# Altium integrated library ALL_COMP (5).IntLib: 200 symbols (part 2 of 2)
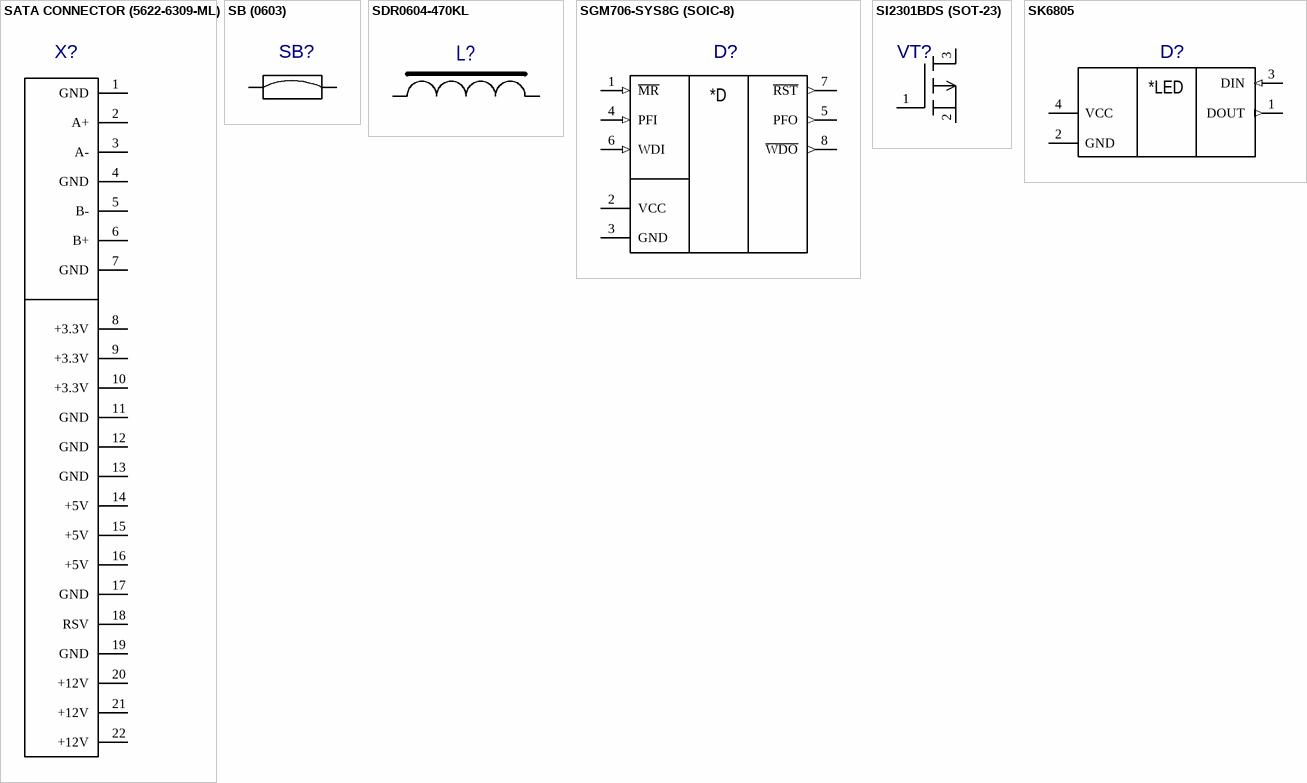
[diagram p19: symbols SATA CONNECTOR (5622-6309-ML) to SK6805]

## SDR0604-470KL
designator L?, comment 0.37 Ohm  (value not drawn)
Value: {Value}; ComponentHeigt: 3.2; Firm: TDK; Name: Катушка индуктивности; Kind: Катушка индуктивности B82432T TDK; Typ: B82432T; NN: *; Packaging: SIMIT 1812-T
footprint SDR0604-470KL
pins: 1, 2

## SGM706-SYS8G (SOIC-8)
designator D?  (value not drawn)
ComponentHeigt: 1.8; Firme: Linear; Leadform: формована; Kind: Микросхема; ClassName: *; Component Link: *; Packaging: SOT-223; NN: *
footprint SOIC-8(R-8)
pins: 1 ~{MR} (in), 2 VCC (power), 3 GND, 4 PFI (in), 5 PFO (out), 6 WDI (in), 7 ~{RST} (out), 8 ~{WDO} (out)
text: *D

## SI2301BDS (SOT-23)
designator VT?
ComponentHeigt: 0.9; Firme: Infineon; Leadform: SMD; NN: 24003422; KIND: Транзистор BSS209PW Infineon; ClassName: *; ComponentWeigt: *; Packaging: PG-SOT-323
footprint SOT-23
pins: 1 G, 2 S, 3 D

## SK6805
designator D?  (value not drawn)
ComponentHeigt: 1.8; Firme: Linear; Leadform: формована; Kind: Микросхема; ClassName: *; Component Link: *; Packaging: SOT-223; NN: *
footprint SK6805
pins: 1 DOUT (out), 2 GND, 3 DIN (in), 4 VCC
text: *LED

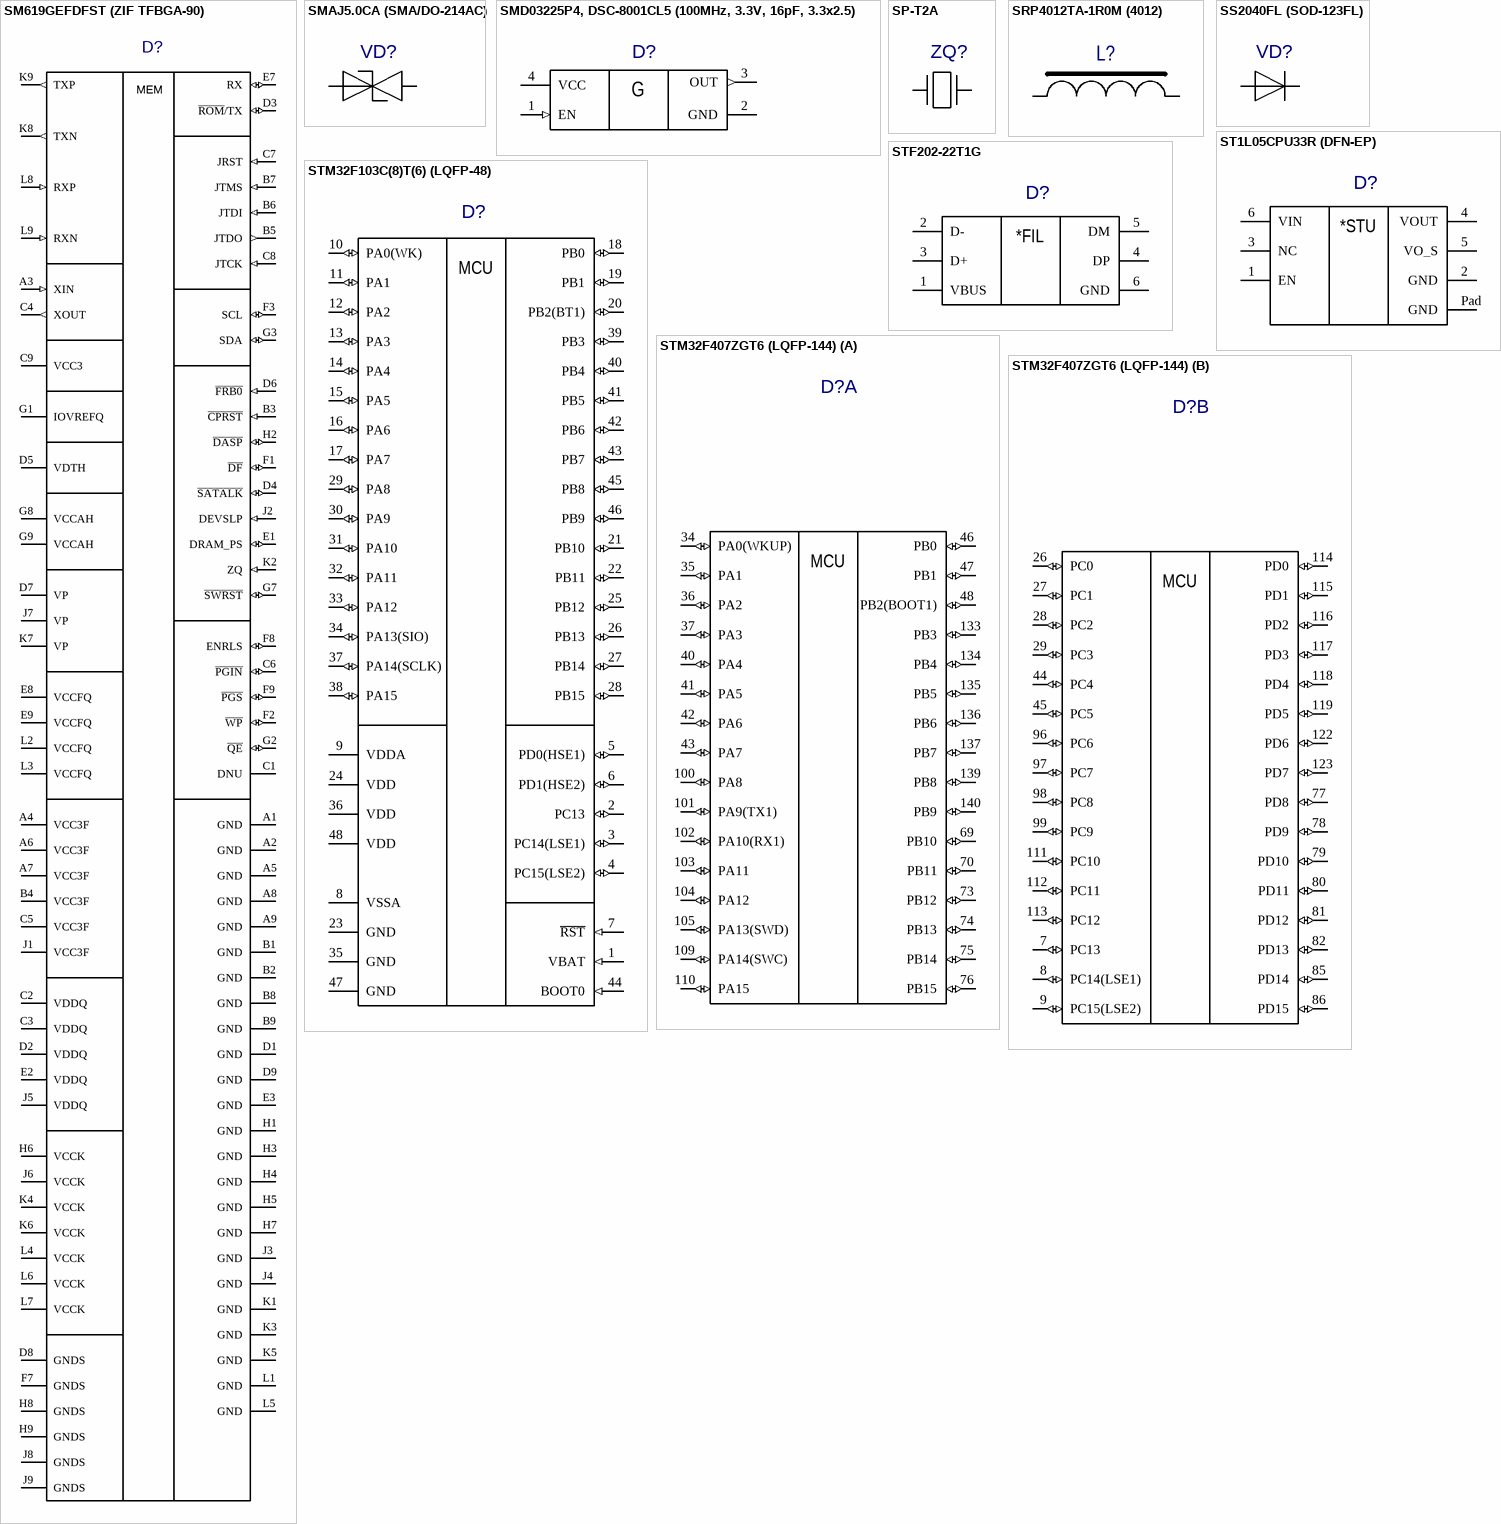
[diagram p9: symbols SM619GEFDFST (ZIF TFBGA-90) to STM32F407ZGT6 (LQFP-144)]

## SM619GEFDFST (ZIF TFBGA-90)
designator D?, comment MT41K256M16TW-107  (value not drawn)
ComponentHeigt: 1.8; Firme: Linear; Leadform: формована; Kind: Микросхема; ClassName: *; Component Link: *; Packaging: SOT-223; NN: *
footprint ASS3145-BGA90-16X20-1-1.67-ZS
pins: A1 GND, A2 GND, A3 XIN (in), A4 VCC3F (power), A5 GND, A6 VCC3F (power), A7 VCC3F (power), A8 GND, A9 GND, B1 GND, B2 GND, B3 ~{CPRST} (in), B4 VCC3F (power), B5 JTDO (out), B6 JTDI (in), B7 JTMS (in), B8 GND, B9 GND, C1 DNU, C2 VDDQ (power), C3 VDDQ (power), C4 XOUT (out), C5 VCC3F (power), C6 ~{PGIN} (io), C7 JRST (in), C8 JTCK (in), C9 VCC3 (power), D1 GND, D2 VDDQ (power), D3 ~{ROM}/TX (io), D4 ~{SATALK} (io), D5 VDTH (power), D6 ~{FRB0} (in), D7 VP (power), D8 GNDS, D9 GND, E1 DRAM_PS (io), E2 VDDQ (power), E3 GND, E7 RX (io), E8 VCCFQ (power), E9 VCCFQ (power), F1 ~{DF} (io), F2 ~{WP} (io), F3 SCL (io), F7 GNDS, F8 ENRLS (io), F9 ~{PGS} (io), G1 IOVREFQ (power), G2 ~{QE} (io), G3 SDA (io), G7 ~{SWRST} (io), G8 VCCAH (power), G9 VCCAH (power), H1 GND, H2 ~{DASP} (io), H3 GND, H4 GND, H5 GND, H6 VCCK (power), H7 GND, H8 GNDS, H9 GNDS, J1 VCC3F (power), J2 DEVSLP (in), J3 GND, J4 GND, J5 VDDQ (power), J6 VCCK (power), J7 VP (power), J8 GNDS, J9 GNDS, K1 GND, K2 ZQ (in), K3 GND, K4 VCCK (power), K5 GND, K6 VCCK (power), K7 VP (power), K8 TXN (out), K9 TXP (out), L1 GND, L2 VCCFQ (power), L3 VCCFQ (power), L4 VCCK (power), L5 GND, L6 VCCK (power), L7 VCCK (power), L8 RXP (in), L9 RXN (in)
text: MEM

## SMAJ5.0CA (SMA/DO-214AC)
designator VD?  (value not drawn)
ComponentHeigt: 0.75; Leadform: в отверстия; Firme: Kingbright; NN: 24003000; KIND: Светодиод L-1154GD Kingbright; Component Link: *; ClassName: *
footprint SMA(DO-214AC)
pins: 1 A, 2 K
1 alternate drawing of the same symbol

## SMD03225P4, DSC-8001CL5 (100MHz, 3.3V, 16pF, 3.3x2.5)
designator D?  (value not drawn)
KIND: Генератор кварцевый 1116R66M00000BF Vectron; NN: 24502141
footprint SMD03225
pins: 1 EN (in), 2 GND, 3 OUT (out), 4 VCC (power)
text: G

## SP-T2A
designator ZQ?  (value not drawn)
footprint SP-T2A (HC-49SM)
pins: 1 (power), 4 (power)

## SRP4012TA-1R0M (4012)
designator L?, comment 0.37 Ohm  (value not drawn)
Value: {Value}; ComponentHeigt: 3.2; Firm: TDK; Name: Катушка индуктивности; Kind: Катушка индуктивности B82432T TDK; Typ: B82432T; NN: *; Packaging: SIMIT 1812-T
footprint SRP4012TA-1R0M (4012)
pins: 1, 2

## SS2040FL (SOD-123FL)
designator VD?  (value not drawn)
ComponentHeigt: 0.75; Leadform: в отверстия; Firme: Kingbright; NN: 24003000; KIND: Светодиод L-1154GD Kingbright; Component Link: *; ClassName: *
footprint SOD-123
pins: 1 A, 2 K
1 alternate drawing of the same symbol

## ST1L05CPU33R (DFN-EP)
designator D?  (value not drawn)
ComponentHeigt: 1.8; Firme: Linear; Leadform: формована; Kind: Микросхема; ClassName: *; Component Link: *; Packaging: SOT-223; NN: *
footprint DFN-6
pins: 1 EN, 2 GND, 3 NC, 4 VOUT, 5 VO_S, 6 VIN, Pad GND
text: *STU

## STF202-22T1G
designator D?  (value not drawn)
ComponentHeigt: 1.8; Firme: Linear; Leadform: формована; Kind: Микросхема; ClassName: *; Component Link: *; Packaging: SOT-223; NN: *
footprint TSOP-6
pins: 1 VBUS, 2 D-, 3 D+, 4 DP, 5 DM, 6 GND
text: *FIL

## STM32F103C(8)T(6) (LQFP-48)
designator D?
Leadform: по чертежу; Note: Установка по чертежу; Kind: Микросхема; Component Link: www.honeywell.com/radhard; ClassName: *; NN: *
footprint 48-LQFP
pins: 1 VBAT (in), 2 PC13 (io), 3 PC14(LSE1) (io), 4 PC15(LSE2) (io), 5 PD0(HSE1) (io), 6 PD1(HSE2) (io), 7 ~{RST} (in), 8 VSSA, 9 VDDA (power), 10 PA0(WK) (io), 11 PA1 (io), 12 PA2 (io), 13 PA3 (io), 14 PA4 (io), 15 PA5 (io), 16 PA6 (io), 17 PA7 (io), 18 PB0 (io), 19 PB1 (io), 20 PB2(BT1) (io), 21 PB10 (io), 22 PB11 (io), 23 GND, 24 VDD (power), 25 PB12 (io), 26 PB13 (io), 27 PB14 (io), 28 PB15 (io), 29 PA8 (io), 30 PA9 (io), 31 PA10 (io), 32 PA11 (io), 33 PA12 (io), 34 PA13(SIO) (io), 35 GND, 36 VDD (power), 37 PA14(SCLK) (io), 38 PA15 (io), 39 PB3 (io), 40 PB4 (io), 41 PB5 (io), 42 PB6 (io), 43 PB7 (io), 44 BOOT0 (in), 45 PB8 (io), 46 PB9 (io), 47 GND, 48 VDD (power)
text: MCU

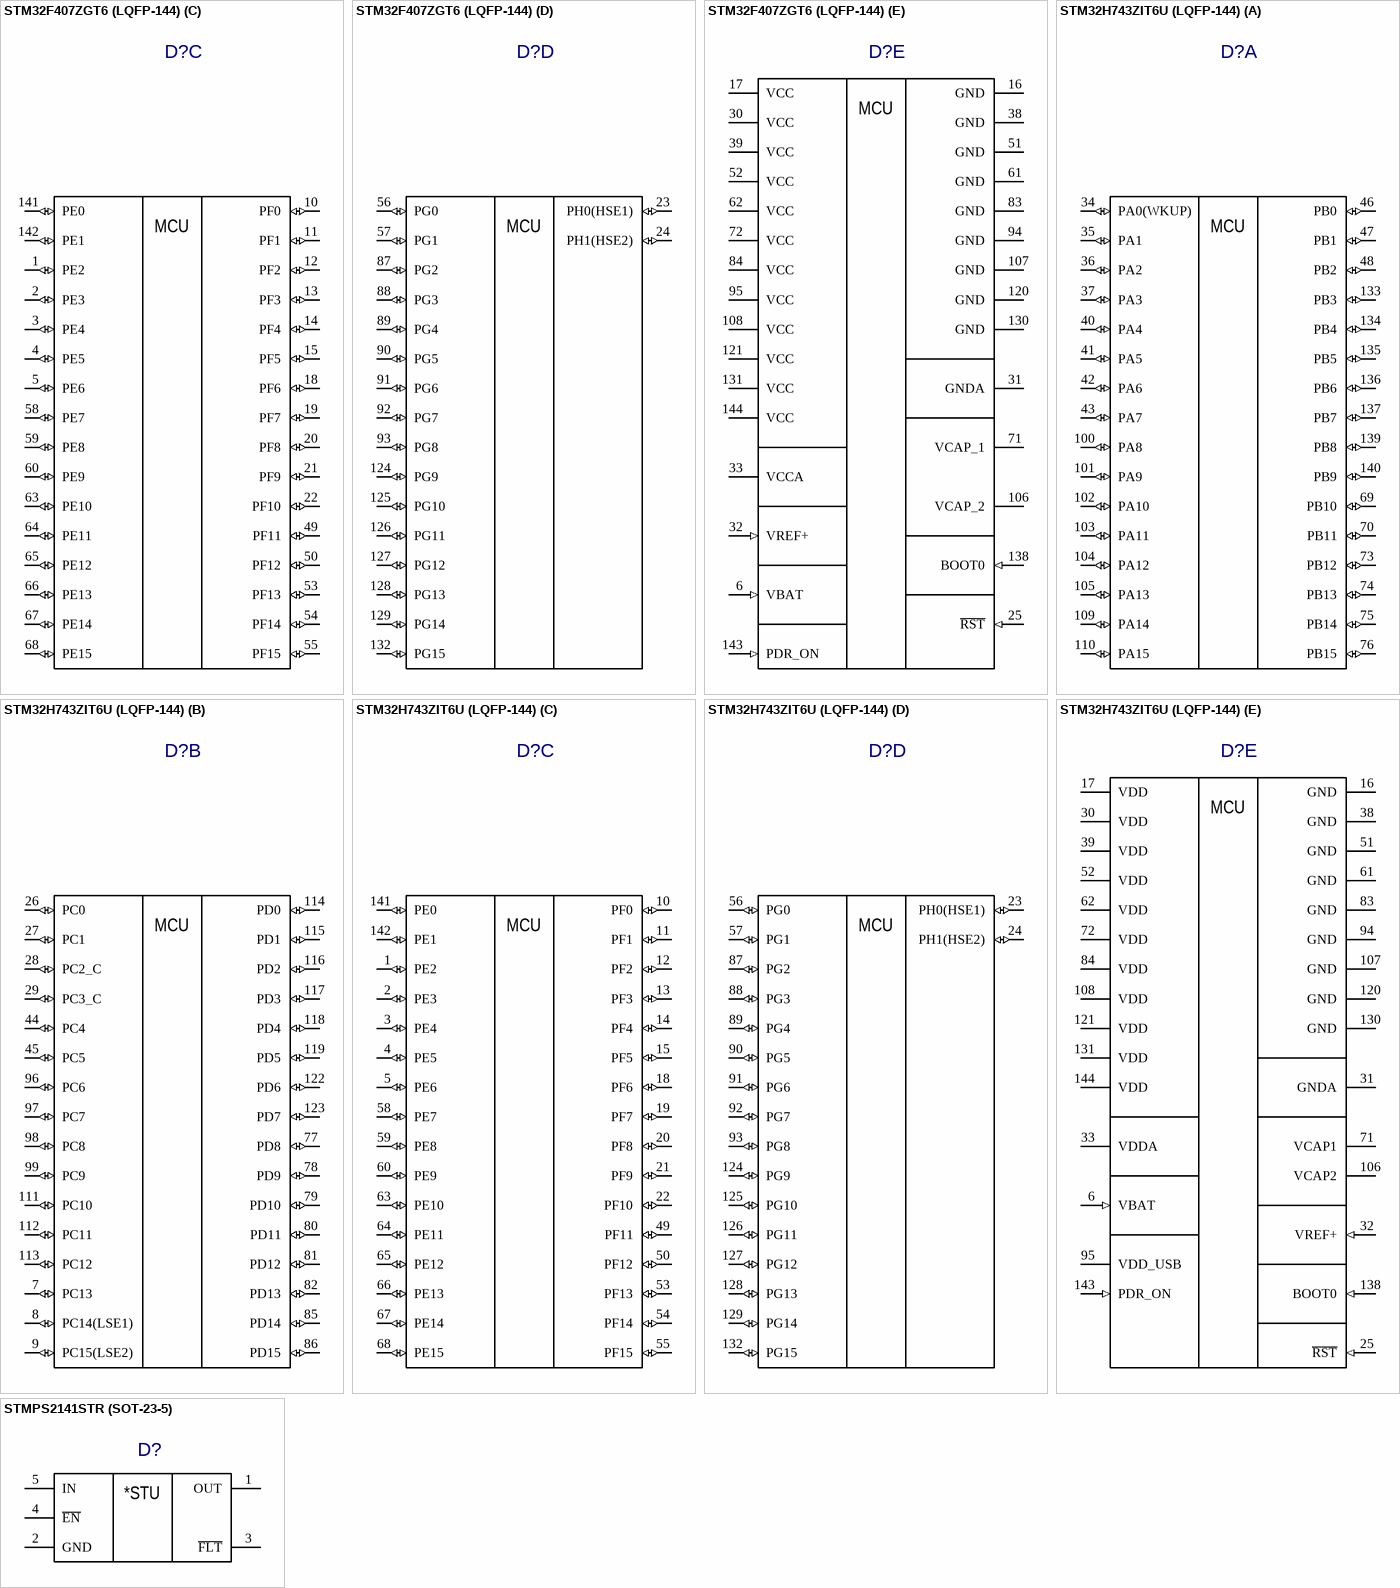
[diagram p10: symbols STM32F407ZGT6 (LQFP-144) to STMPS2141STR (SOT-23-5)]

## STM32F407ZGT6 (LQFP-144)
designator D?
Leadform: по чертежу; Note: Установка по чертежу; Kind: Микросхема; Component Link: www.honeywell.com/radhard; ClassName: *; NN: *
footprint LQFP-144
part A pins: 34 PA0(WKUP) (io), 35 PA1 (io), 36 PA2 (io), 37 PA3 (io), 40 PA4 (io), 41 PA5 (io), 42 PA6 (io), 43 PA7 (io), 46 PB0 (io), 47 PB1 (io), 48 PB2(BOOT1) (io), 69 PB10 (io), 70 PB11 (io), 73 PB12 (io), 74 PB13 (io), 75 PB14 (io), 76 PB15 (io), 100 PA8 (io), 101 PA9(TX1) (io), 102 PA10(RX1) (io), 103 PA11 (io), 104 PA12 (io), 105 PA13(SWD) (io), 109 PA14(SWC) (io), 110 PA15 (io), 133 PB3 (io), 134 PB4 (io), 135 PB5 (io), 136 PB6 (io), 137 PB7 (io), 139 PB8 (io), 140 PB9 (io)
part B pins: 7 PC13 (io), 8 PC14(LSE1) (io), 9 PC15(LSE2) (io), 26 PC0 (io), 27 PC1 (io), 28 PC2 (io), 29 PC3 (io), 44 PC4 (io), 45 PC5 (io), 77 PD8 (io), 78 PD9 (io), 79 PD10 (io), 80 PD11 (io), 81 PD12 (io), 82 PD13 (io), 85 PD14 (io), 86 PD15 (io), 96 PC6 (io), 97 PC7 (io), 98 PC8 (io), 99 PC9 (io), 111 PC10 (io), 112 PC11 (io), 113 PC12 (io), 114 PD0 (io), 115 PD1 (io), 116 PD2 (io), 117 PD3 (io), 118 PD4 (io), 119 PD5 (io), 122 PD6 (io), 123 PD7 (io)
part C pins: 1 PE2 (io), 2 PE3 (io), 3 PE4 (io), 4 PE5 (io), 5 PE6 (io), 10 PF0 (io), 11 PF1 (io), 12 PF2 (io), 13 PF3 (io), 14 PF4 (io), 15 PF5 (io), 18 PF6 (io), 19 PF7 (io), 20 PF8 (io), 21 PF9 (io), 22 PF10 (io), 49 PF11 (io), 50 PF12 (io), 53 PF13 (io), 54 PF14 (io), 55 PF15 (io), 58 PE7 (io), 59 PE8 (io), 60 PE9 (io), 63 PE10 (io), 64 PE11 (io), 65 PE12 (io), 66 PE13 (io), 67 PE14 (io), 68 PE15 (io), 141 PE0 (io), 142 PE1 (io)
part D pins: 23 PH0(HSE1) (io), 24 PH1(HSE2) (io), 56 PG0 (io), 57 PG1 (io), 87 PG2 (io), 88 PG3 (io), 89 PG4 (io), 90 PG5 (io), 91 PG6 (io), 92 PG7 (io), 93 PG8 (io), 124 PG9 (io), 125 PG10 (io), 126 PG11 (io), 127 PG12 (io), 128 PG13 (io), 129 PG14 (io), 132 PG15 (io)
part E pins: 6 VBAT (in), 16 GND, 17 VCC (power), 25 ~{RST} (in), 30 VCC (power), 31 GNDA, 32 VREF+ (in), 33 VCCA (power), 38 GND, 39 VCC (power), 51 GND, 52 VCC (power), 61 GND, 62 VCC (power), 71 VCAP_1, 72 VCC (power), 83 GND, 84 VCC (power), 94 GND, 95 VCC (power), 106 VCAP_2, 107 GND, 108 VCC (power), 120 GND, 121 VCC (power), 130 GND, 131 VCC (power), 138 BOOT0 (in), 143 PDR_ON (in), 144 VCC (power)
part A text: MCU
part B text: MCU
part C text: MCU
part D text: MCU
part E text: MCU

## STM32H743ZIT6U (LQFP-144)
designator D?
Leadform: по чертежу; Note: Установка по чертежу; Kind: Микросхема; Component Link: www.honeywell.com/radhard; ClassName: *; NN: *
footprint LQFP-144
part A pins: 34 PA0(WKUP) (io), 35 PA1 (io), 36 PA2 (io), 37 PA3 (io), 40 PA4 (io), 41 PA5 (io), 42 PA6 (io), 43 PA7 (io), 46 PB0 (io), 47 PB1 (io), 48 PB2 (io), 69 PB10 (io), 70 PB11 (io), 73 PB12 (io), 74 PB13 (io), 75 PB14 (io), 76 PB15 (io), 100 PA8 (io), 101 PA9 (io), 102 PA10 (io), 103 PA11 (io), 104 PA12 (io), 105 PA13 (io), 109 PA14 (io), 110 PA15 (io), 133 PB3 (io), 134 PB4 (io), 135 PB5 (io), 136 PB6 (io), 137 PB7 (io), 139 PB8 (io), 140 PB9 (io)
part B pins: 7 PC13 (io), 8 PC14(LSE1) (io), 9 PC15(LSE2) (io), 26 PC0 (io), 27 PC1 (io), 28 PC2_C (io), 29 PC3_C (io), 44 PC4 (io), 45 PC5 (io), 77 PD8 (io), 78 PD9 (io), 79 PD10 (io), 80 PD11 (io), 81 PD12 (io), 82 PD13 (io), 85 PD14 (io), 86 PD15 (io), 96 PC6 (io), 97 PC7 (io), 98 PC8 (io), 99 PC9 (io), 111 PC10 (io), 112 PC11 (io), 113 PC12 (io), 114 PD0 (io), 115 PD1 (io), 116 PD2 (io), 117 PD3 (io), 118 PD4 (io), 119 PD5 (io), 122 PD6 (io), 123 PD7 (io)
part C pins: 1 PE2 (io), 2 PE3 (io), 3 PE4 (io), 4 PE5 (io), 5 PE6 (io), 10 PF0 (io), 11 PF1 (io), 12 PF2 (io), 13 PF3 (io), 14 PF4 (io), 15 PF5 (io), 18 PF6 (io), 19 PF7 (io), 20 PF8 (io), 21 PF9 (io), 22 PF10 (io), 49 PF11 (io), 50 PF12 (io), 53 PF13 (io), 54 PF14 (io), 55 PF15 (io), 58 PE7 (io), 59 PE8 (io), 60 PE9 (io), 63 PE10 (io), 64 PE11 (io), 65 PE12 (io), 66 PE13 (io), 67 PE14 (io), 68 PE15 (io), 141 PE0 (io), 142 PE1 (io)
part D pins: 23 PH0(HSE1) (io), 24 PH1(HSE2) (io), 56 PG0 (io), 57 PG1 (io), 87 PG2 (io), 88 PG3 (io), 89 PG4 (io), 90 PG5 (io), 91 PG6 (io), 92 PG7 (io), 93 PG8 (io), 124 PG9 (io), 125 PG10 (io), 126 PG11 (io), 127 PG12 (io), 128 PG13 (io), 129 PG14 (io), 132 PG15 (io)
part E pins: 6 VBAT (in), 16 GND, 17 VDD (power), 25 ~{RST} (in), 30 VDD (power), 31 GNDA, 32 VREF+ (in), 33 VDDA (power), 38 GND, 39 VDD (power), 51 GND, 52 VDD (power), 61 GND, 62 VDD (power), 71 VCAP1, 72 VDD (power), 83 GND, 84 VDD (power), 94 GND, 95 VDD_USB (power), 106 VCAP2, 107 GND, 108 VDD (power), 120 GND, 121 VDD (power), 130 GND, 131 VDD (power), 138 BOOT0 (in), 143 PDR_ON (in), 144 VDD (power)
part A text: MCU
part B text: MCU
part C text: MCU
part D text: MCU
part E text: MCU

## STMPS2141STR (SOT-23-5)
designator D?  (value not drawn)
ComponentHeigt: 1.8; Firme: Linear; Leadform: формована; Kind: Микросхема; ClassName: *; Component Link: *; Packaging: SOT-223; NN: *
footprint SOT-23-5
pins: 1 OUT, 2 GND, 3 ~{FLT}, 4 ~{EN}, 5 IN
text: *STU

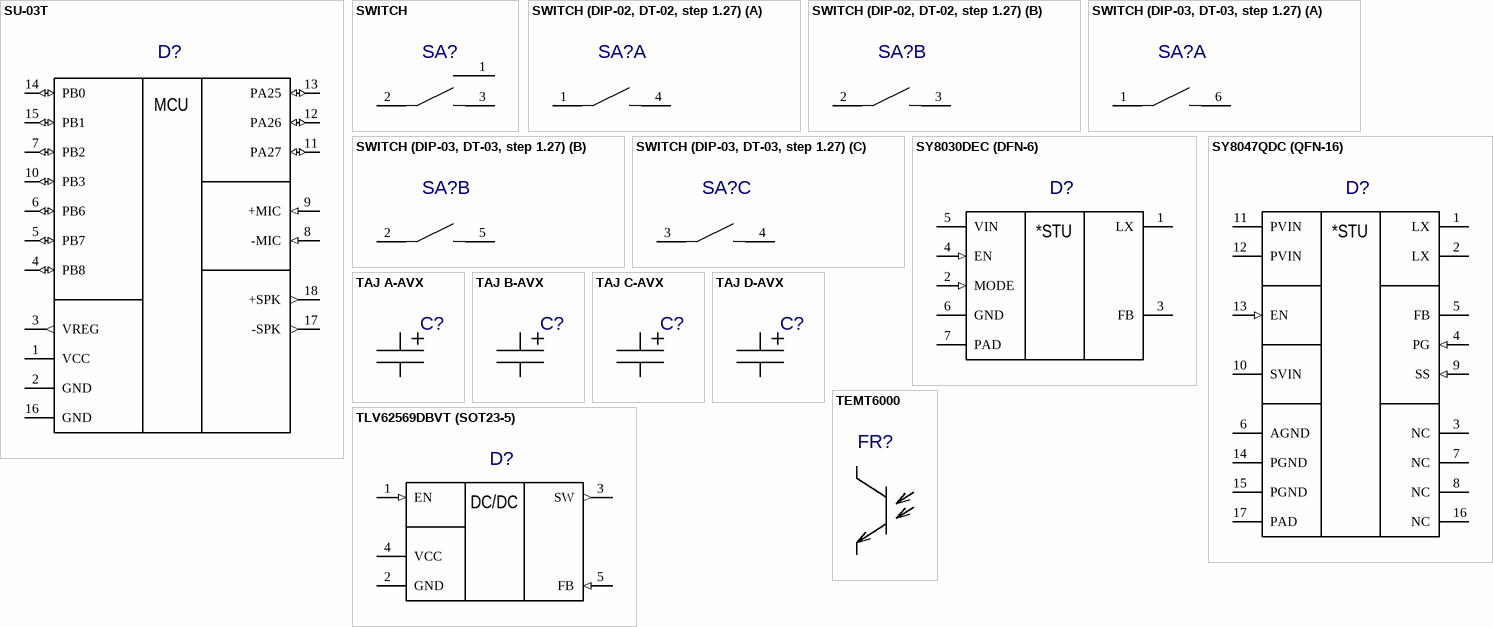
[diagram p11: symbols SU-03T to TLV62569DBVT (SOT23-5)]

## SU-03T
designator D?
Leadform: по чертежу; Note: Установка по чертежу; Kind: Микросхема; Component Link: www.honeywell.com/radhard; ClassName: *; NN: *
footprint SU-03T
pins: 1 VCC (power), 2 GND, 3 VREG (out), 4 PB8 (io), 5 PB7 (io), 6 PB6 (io), 7 PB2 (io), 8 -MIC (in), 9 +MIC (in), 10 PB3 (io), 11 PA27 (io), 12 PA26 (io), 13 PA25 (io), 14 PB0 (io), 15 PB1 (io), 16 GND, 17 -SPK (out), 18 +SPK (out)
text: MCU

## SWITCH
designator SA?
Component Heigt: 7; Leadform: SMD; Firme: TYCO; NN: 25100175; KIND: Кнопка 1-1977223-9 Tyco; ClassName: *; Component Link: *
footprint SWITCH
pins: 1, 2, 3

## SWITCH (DIP-02, DT-02, step 1.27)
designator SA?
Component Heigt: 7; Leadform: SMD; Firme: TYCO; NN: 25100175; KIND: Кнопка 1-1977223-9 Tyco; ClassName: *; Component Link: *
footprint SWITCH (DIP-02, DT-02, step 1.27)
part A pins: 1, 4
part B pins: 2, 3

## SWITCH (DIP-03, DT-03, step 1.27)
designator SA?
Component Heigt: 7; Leadform: SMD; Firme: TYCO; NN: 25100175; KIND: Кнопка 1-1977223-9 Tyco; ClassName: *; Component Link: *
footprint SWITCH (DIP-03, DT-03, step 1.27)
part A pins: 1, 6
part B pins: 2, 5
part C pins: 3, 4

## SY8030DEC (DFN-6)
designator D?  (value not drawn)
ComponentHeigt: 1.8; Firme: Linear; Leadform: формована; Kind: Микросхема; ClassName: *; Component Link: *; Packaging: SOT-223; NN: *
footprint DFN-6(2x2)
pins: 1 LX, 2 MODE (in), 3 FB, 4 EN (in), 5 VIN (power), 6 GND, 7 PAD
text: *STU

## SY8047QDC (QFN-16)
designator D?  (value not drawn)
ComponentHeigt: 1.8; Firme: Linear; Leadform: формована; Kind: Микросхема; ClassName: *; Component Link: *; Packaging: SOT-223; NN: *
footprint QFN-16
pins: 1 LX, 2 LX, 3 NC, 4 PG (in), 5 FB, 6 AGND, 7 NC, 8 NC, 9 SS (in), 10 SVIN (power), 11 PVIN (power), 12 PVIN (power), 13 EN (in), 14 PGND, 15 PGND, 16 NC, 17 PAD
text: *STU

## TAJ A-AVX
designator C?  (value not drawn)
ComponentHeigt: 1.6; ComponentWeigt: ??; Firme: AVX; KIND: Конденсатор; Component Link: *; Packaging: R; Value: *; ClassName: *; NN: *
footprint TAJA
pins: 1, 2

## TAJ B-AVX
designator C?  (value not drawn)
ComponentHeigt: 1.6; ComponentWeigt: ??; Firme: AVX; KIND: Конденсатор; Component Link: *; Packaging: R; Value: *; ClassName: *; NN: *
footprint TAJB
pins: 1, 2

## TAJ C-AVX
designator C?  (value not drawn)
ComponentHeigt: 1.6; ComponentWeigt: ??; Firme: AVX; KIND: Конденсатор; Component Link: *; Packaging: R; Value: *; ClassName: *; NN: *
footprint TAJC
pins: 1, 2

## TAJ D-AVX
designator C?  (value not drawn)
ComponentHeigt: 1.6; ComponentWeigt: ??; Firme: AVX; KIND: Конденсатор; Component Link: *; Packaging: R; Value: *; ClassName: *; NN: *
footprint TAJD
pins: 1, 2

## TEMT6000
designator FR?  (value not drawn)
ComponentHeigt: 0.5; Leadform: SMD; Firme: Yageo; Kind: Резистор; Packaging: 0402; ClassName: *; Component Link: *; NN: *
footprint TEMT6000
pins: 1 E, 3 K

## TLV62569DBVT (SOT23-5)
designator D?  (value not drawn)
ComponentHeigt: 1.8; Firme: Linear; Leadform: формована; Kind: Микросхема; ClassName: *; Component Link: *; Packaging: SOT-223; NN: *
footprint SOT-23-5
pins: 1 EN (in), 2 GND, 3 SW (out), 4 VCC (power), 5 FB (in)
text: DC/DC

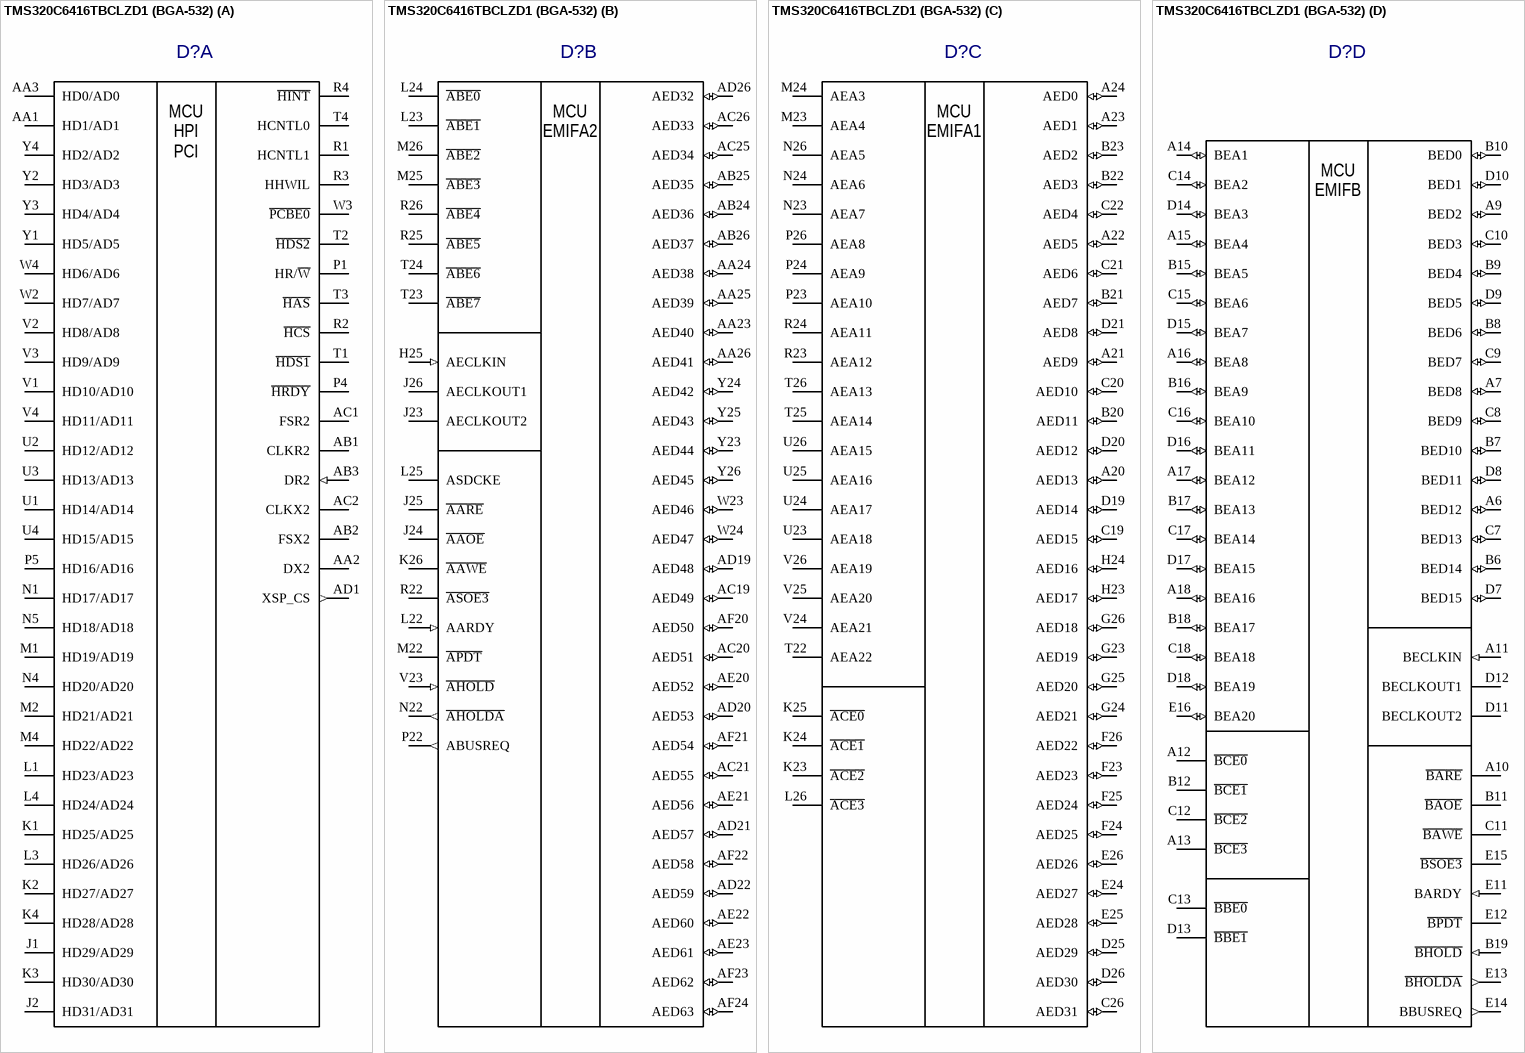
[diagram p12: symbol TMS320C6416TBCLZD1 (BGA-532)]

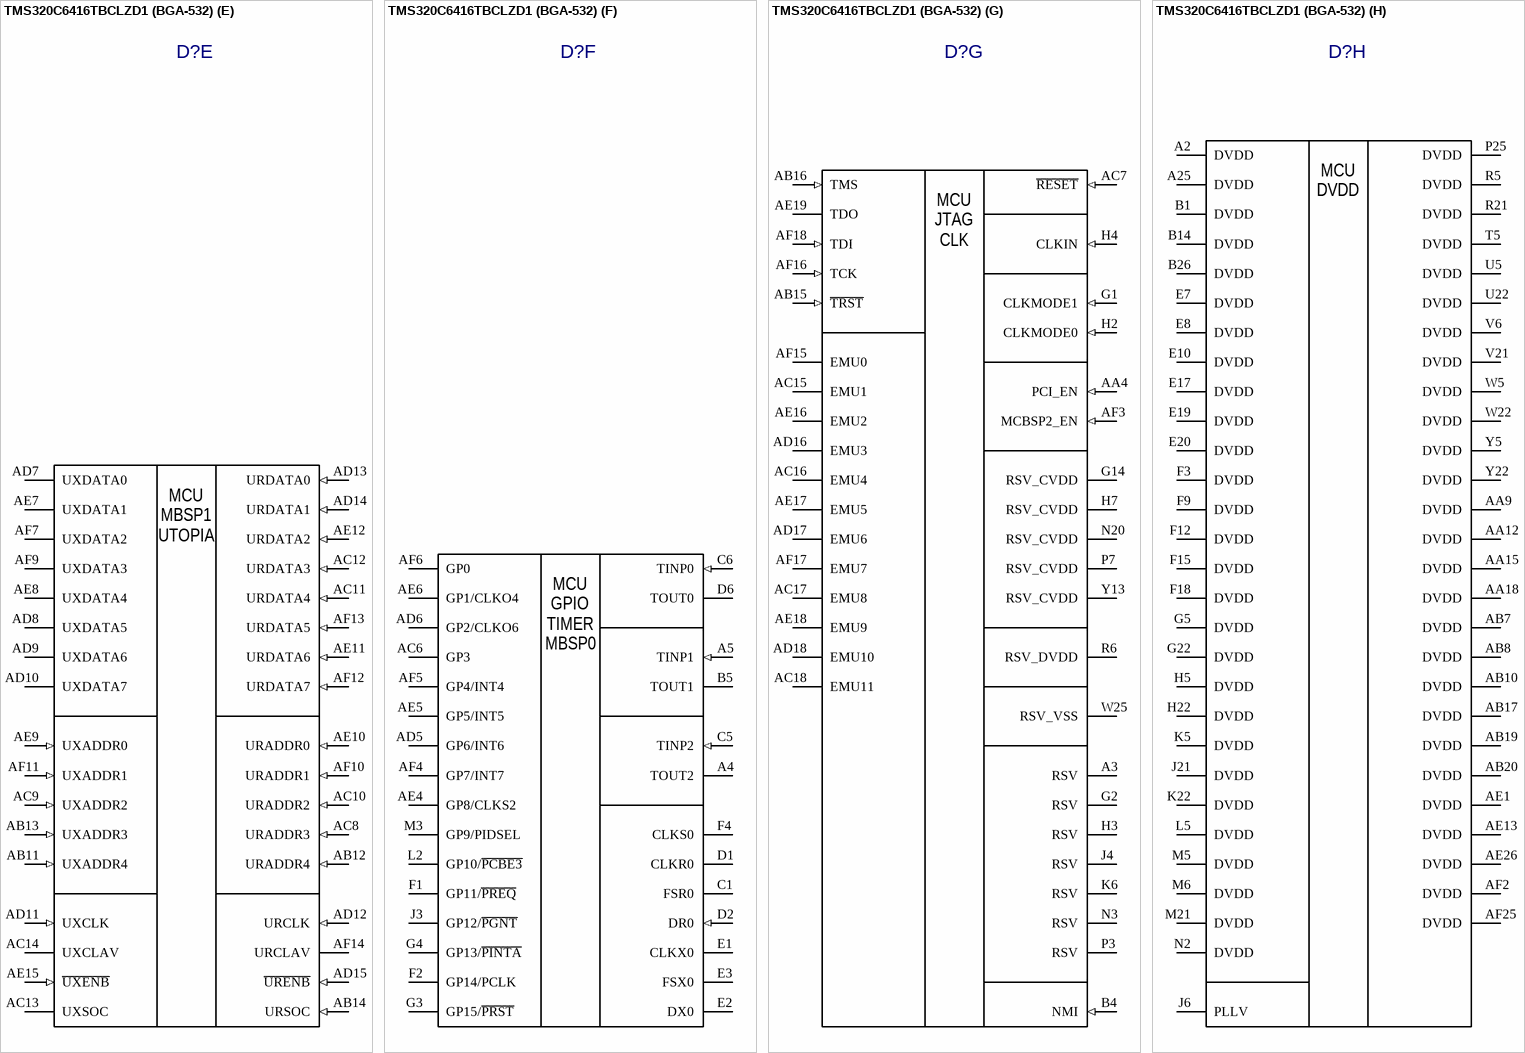
[diagram p13: symbol TMS320C6416TBCLZD1 (BGA-532)]

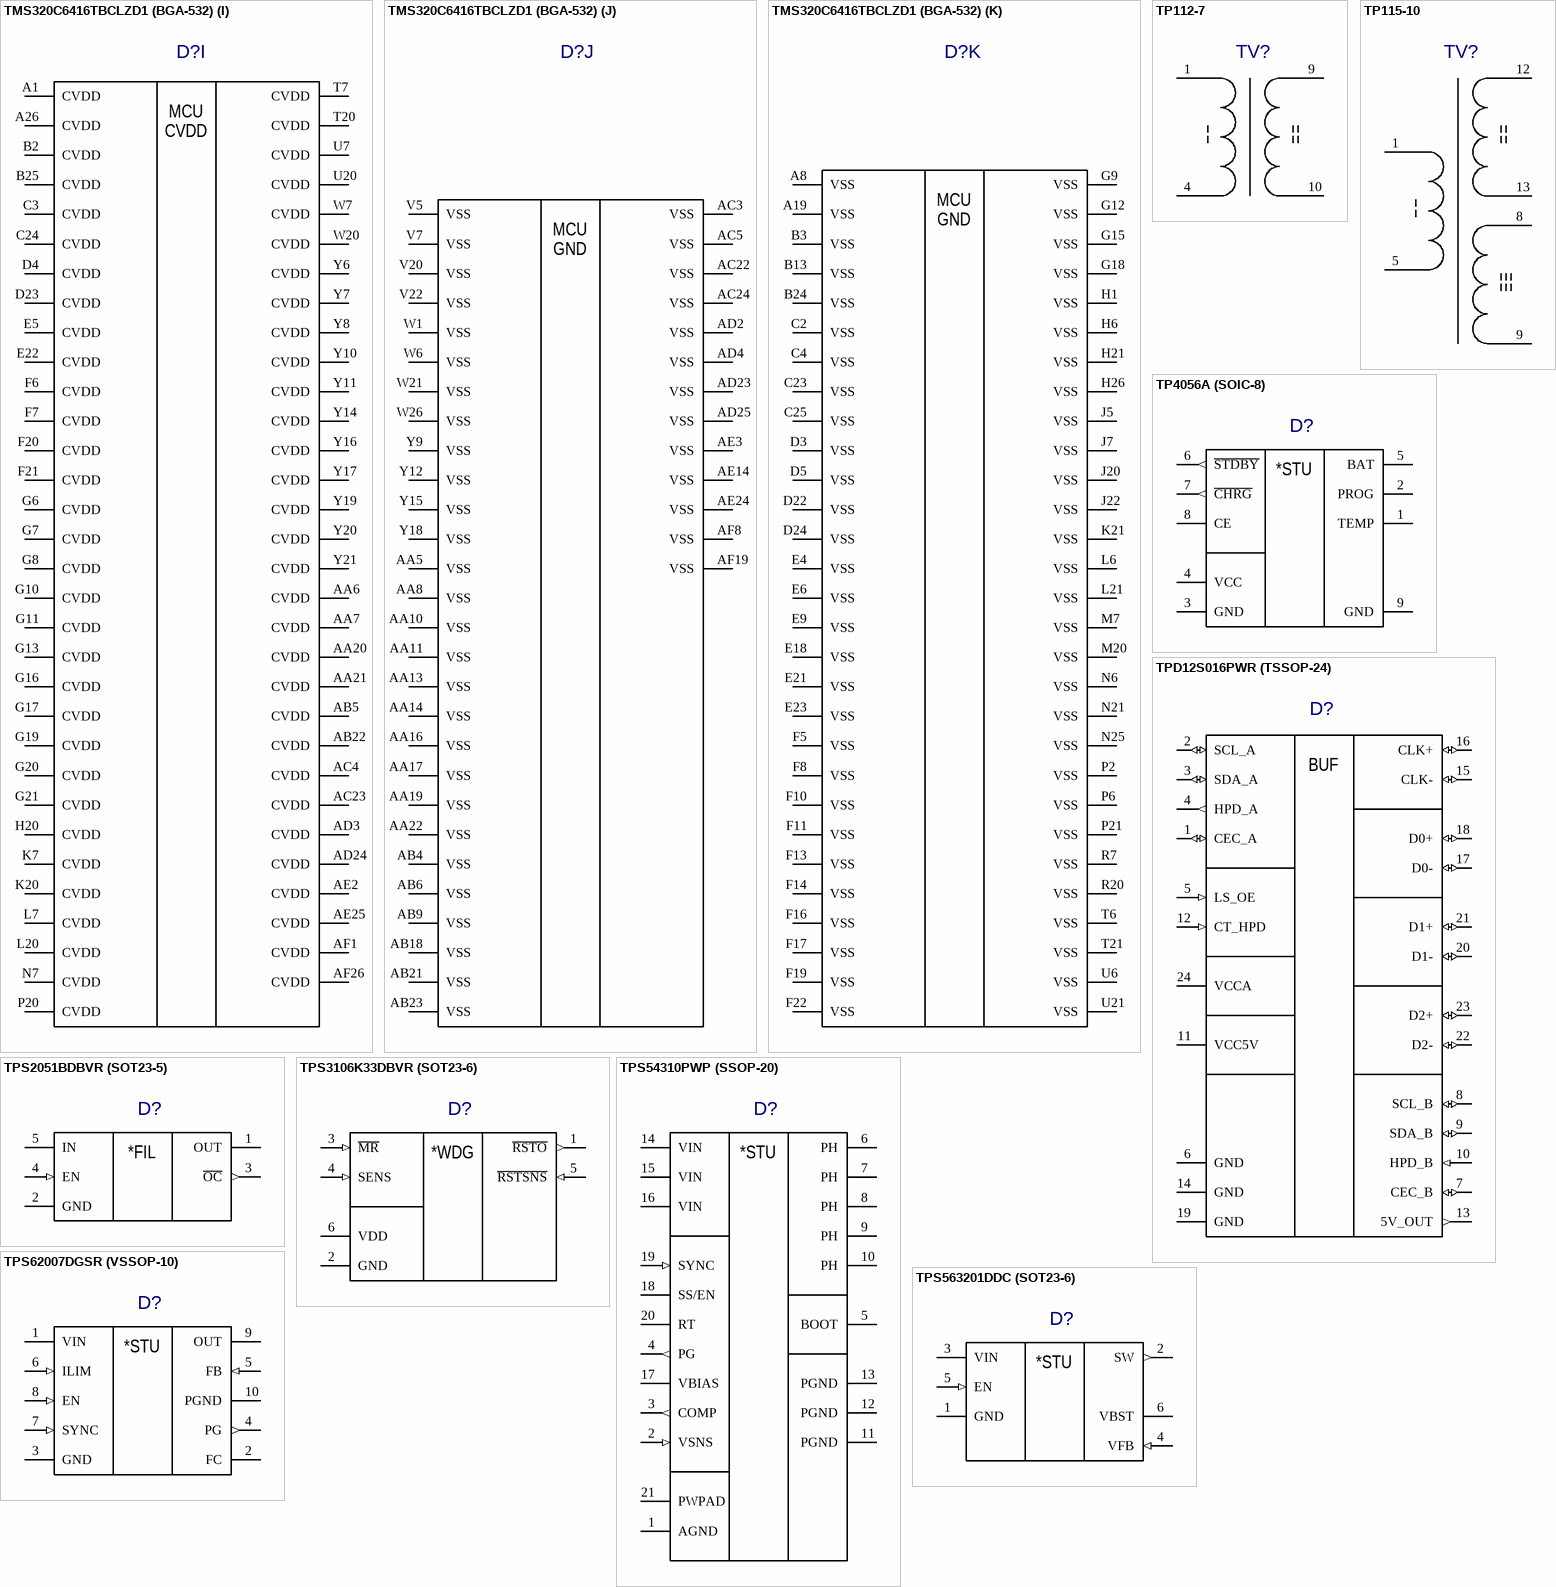
[diagram p14: symbols TMS320C6416TBCLZD1 (BGA-532) to TPS563201DDC (SOT23-6)]

## TMS320C6416TBCLZD1 (BGA-532)
designator D?
Leadform: по чертежу; Note: Установка по чертежу; Kind: Микросхема; Component Link: www.honeywell.com/radhard; ClassName: *; NN: *
footprint BGA-532
part A pins: AA1 HD1/AD1, AA2 DX2, AA3 HD0/AD0, AB1 CLKR2, AB2 FSX2, AB3 DR2 (in), AC1 FSR2, AC2 CLKX2, AD1 XSP_CS (out), J1 HD29/AD29, J2 HD31/AD31, K1 HD25/AD25, K2 HD27/AD27, K3 HD30/AD30, K4 HD28/AD28, L1 HD23/AD23, L3 HD26/AD26, L4 HD24/AD24, M1 HD19/AD19, M2 HD21/AD21, M4 HD22/AD22, N1 HD17/AD17, N4 HD20/AD20, N5 HD18/AD18, P1 HR/~{W}, P4 ~{HRDY}, P5 HD16/AD16, R1 HCNTL1, R2 ~{HCS}, R3 HHWIL, R4 ~{HINT}, T1 ~{HDS1}, T2 ~{HDS2}, T3 ~{HAS}, T4 HCNTL0, U1 HD14/AD14, U2 HD12/AD12, U3 HD13/AD13, U4 HD15/AD15, V1 HD10/AD10, V2 HD8/AD8, V3 HD9/AD9, V4 HD11/AD11, W2 HD7/AD7, W3 ~{PCBE0}, W4 HD6/AD6, Y1 HD5/AD5, Y2 HD3/AD3, Y3 HD4/AD4, Y4 HD2/AD2
part B pins: AA23 AED40 (io), AA24 AED38 (io), AA25 AED39 (io), AA26 AED41 (io), AB24 AED36 (io), AB25 AED35 (io), AB26 AED37 (io), AC19 AED49 (io), AC20 AED51 (io), AC21 AED55 (io), AC25 AED34 (io), AC26 AED33 (io), AD19 AED48 (io), AD20 AED53 (io), AD21 AED57 (io), AD22 AED59 (io), AD26 AED32 (io), AE20 AED52 (io), AE21 AED56 (io), AE22 AED60 (io), AE23 AED61 (io), AF20 AED50 (io), AF21 AED54 (io), AF22 AED58 (io), AF23 AED62 (io), AF24 AED63 (io), H25 AECLKIN (in), J23 AECLKOUT2, J24 ~{AAOE}, J25 ~{AARE}, J26 AECLKOUT1, K26 ~{AAWE}, L22 AARDY (in), L23 ~{ABE1}, L24 ~{ABE0}, L25 ASDCKE, M22 ~{APDT}, M25 ~{ABE3}, M26 ~{ABE2}, N22 ~{AHOLDA} (out), P22 ABUSREQ (out), R22 ~{ASOE3}, R25 ~{ABE5}, R26 ~{ABE4}, T23 ~{ABE7}, T24 ~{ABE6}, V23 ~{AHOLD} (in), W23 AED46 (io), W24 AED47 (io), Y23 AED44 (io), Y24 AED42 (io), Y25 AED43 (io), Y26 AED45 (io)
part C pins: A20 AED13 (io), A21 AED9 (io), A22 AED5 (io), A23 AED1 (io), A24 AED0 (io), B20 AED11 (io), B21 AED7 (io), B22 AED3 (io), B23 AED2 (io), C19 AED15 (io), C20 AED10 (io), C21 AED6 (io), C22 AED4 (io), C26 AED31 (io), D19 AED14 (io), D20 AED12 (io), D21 AED8 (io), D25 AED29 (io), D26 AED30 (io), E24 AED27 (io), E25 AED28 (io), E26 AED26 (io), F23 AED23 (io), F24 AED25 (io), F25 AED24 (io), F26 AED22 (io), G23 AED19 (io), G24 AED21 (io), G25 AED20 (io), G26 AED18 (io), H23 AED17 (io), H24 AED16 (io), K23 ~{ACE2}, K24 ~{ACE1}, K25 ~{ACE0}, L26 ~{ACE3}, M23 AEA4, M24 AEA3, N23 AEA7, N24 AEA6, N26 AEA5, P23 AEA10, P24 AEA9, P26 AEA8, R23 AEA12, R24 AEA11, T22 AEA22, T25 AEA14, T26 AEA13, U23 AEA18, U24 AEA17, U25 AEA16, U26 AEA15, V24 AEA21, V25 AEA20, V26 AEA19
part D pins: A6 BED12 (io), A7 BED8 (io), A9 BED2 (io), A10 ~{BARE}, A11 BECLKIN (in), A12 ~{BCE0}, A13 ~{BCE3}, A14 BEA1 (io), A15 BEA4 (io), A16 BEA8 (io), A17 BEA12 (io), A18 BEA16 (io), B6 BED14 (io), B7 BED10 (io), B8 BED6 (io), B9 BED4 (io), B10 BED0 (io), B11 ~{BAOE}, B12 ~{BCE1}, B15 BEA5 (io), B16 BEA9 (io), B17 BEA13 (io), B18 BEA17 (io), B19 ~{BHOLD} (in), C7 BED13 (io), C8 BED9 (io), C9 BED7 (io), C10 BED3 (io), C11 ~{BAWE}, C12 ~{BCE2}, C13 ~{BBE0}, C14 BEA2 (io), C15 BEA6 (io), C16 BEA10 (io), C17 BEA14 (io), C18 BEA18 (io), D7 BED15 (io), D8 BED11 (io), D9 BED5 (io), D10 BED1 (io), D11 BECLKOUT2, D12 BECLKOUT1, D13 ~{BBE1}, D14 BEA3 (io), D15 BEA7 (io), D16 BEA11 (io), D17 BEA15 (io), D18 BEA19 (io), E11 BARDY (in), E12 ~{BPDT}, E13 ~{BHOLDA} (out), E14 BBUSREQ (out), E15 ~{BSOE3}, E16 BEA20 (io)
part E pins: AB11 UXADDR4 (in), AB12 URADDR4 (in), AB13 UXADDR3 (in), AB14 URSOC (in), AC8 URADDR3 (in), AC9 UXADDR2 (in), AC10 URADDR2 (in), AC11 URDATA4 (in), AC12 URDATA3 (in), AC13 UXSOC, AC14 UXCLAV, AD7 UXDATA0, AD8 UXDATA5, AD9 UXDATA6, AD10 UXDATA7, AD11 UXCLK (in), AD12 URCLK (in), AD13 URDATA0 (in), AD14 URDATA1 (in), AD15 ~{URENB} (in), AE7 UXDATA1, AE8 UXDATA4, AE9 UXADDR0 (in), AE10 URADDR0 (in), AE11 URDATA6 (in), AE12 URDATA2 (in), AE15 ~{UXENB} (in), AF7 UXDATA2, AF9 UXDATA3, AF10 URADDR1 (in), AF11 UXADDR1 (in), AF12 URDATA7 (in), AF13 URDATA5 (in), AF14 URCLAV
part F pins: A4 TOUT2, A5 TINP1 (in), AC6 GP3, AD5 GP6/INT6, AD6 GP2/CLKO6, AE4 GP8/CLKS2, AE5 GP5/INT5, AE6 GP1/CLKO4, AF4 GP7/INT7, AF5 GP4/INT4, AF6 GP0, B5 TOUT1, C1 FSR0, C5 TINP2 (in), C6 TINP0 (in), D1 CLKR0, D2 DR0 (in), D6 TOUT0, E1 CLKX0, E2 DX0, E3 FSX0, F1 GP11/~{PREQ}, F2 GP14/PCLK, F4 CLKS0, G3 GP15/~{PRST}, G4 GP13/~{PINTA}, J3 GP12/~{PGNT}, L2 GP10/~{PCBE3}, M3 GP9/PIDSEL
part G pins: A3 RSV, AA4 PCI_EN (in), AB15 ~{TRST} (in), AB16 TMS (in), AC7 ~{RESET} (in), AC15 EMU1, AC16 EMU4, AC17 EMU8, AC18 EMU11, AD16 EMU3, AD17 EMU6, AD18 EMU10, AE16 EMU2, AE17 EMU5, AE18 EMU9, AE19 TDO, AF3 MCBSP2_EN (in), AF15 EMU0, AF16 TCK (in), AF17 EMU7, AF18 TDI (in), B4 NMI (in), G1 CLKMODE1 (in), G2 RSV, G14 RSV_CVDD, H2 CLKMODE0 (in), H3 RSV, H4 CLKIN (in), H7 RSV_CVDD, J4 RSV, K6 RSV, N3 RSV, N20 RSV_CVDD, P3 RSV, P7 RSV_CVDD, R6 RSV_DVDD, W25 RSV_VSS, Y13 RSV_CVDD
part H pins: A2 DVDD (power), A25 DVDD (power), AA9 DVDD (power), AA12 DVDD (power), AA15 DVDD (power), AA18 DVDD (power), AB7 DVDD (power), AB8 DVDD (power), AB10 DVDD (power), AB17 DVDD (power), AB19 DVDD (power), AB20 DVDD (power), AE1 DVDD (power), AE13 DVDD (power), AE26 DVDD (power), AF2 DVDD (power), AF25 DVDD (power), B1 DVDD (power), B14 DVDD (power), B26 DVDD (power), E7 DVDD (power), E8 DVDD (power), E10 DVDD (power), E17 DVDD (power), E19 DVDD (power), E20 DVDD (power), F3 DVDD (power), F9 DVDD (power), F12 DVDD (power), F15 DVDD (power), F18 DVDD (power), G5 DVDD (power), G22 DVDD (power), H5 DVDD (power), H22 DVDD (power), J6 PLLV, J21 DVDD (power), K5 DVDD (power), K22 DVDD (power), L5 DVDD (power), M5 DVDD (power), M6 DVDD (power), M21 DVDD (power), N2 DVDD (power), P25 DVDD (power), R5 DVDD (power), R21 DVDD (power), T5 DVDD (power), U5 DVDD (power), U22 DVDD (power), V6 DVDD (power), V21 DVDD (power), W5 DVDD (power), W22 DVDD (power), Y5 DVDD (power), Y22 DVDD (power)
part I pins: A1 CVDD (power), A26 CVDD (power), AA6 CVDD (power), AA7 CVDD (power), AA20 CVDD (power), AA21 CVDD (power), AB5 CVDD (power), AB22 CVDD (power), AC4 CVDD (power), AC23 CVDD (power), AD3 CVDD (power), AD24 CVDD (power), AE2 CVDD (power), AE25 CVDD (power), AF1 CVDD (power), AF26 CVDD (power), B2 CVDD (power), B25 CVDD (power), C3 CVDD (power), C24 CVDD (power), D4 CVDD (power), D23 CVDD (power), E5 CVDD (power), E22 CVDD (power), F6 CVDD (power), F7 CVDD (power), F20 CVDD (power), F21 CVDD (power), G6 CVDD (power), G7 CVDD (power), G8 CVDD (power), G10 CVDD (power), G11 CVDD (power), G13 CVDD (power), G16 CVDD (power), G17 CVDD (power), G19 CVDD (power), G20 CVDD (power), G21 CVDD (power), H20 CVDD (power), K7 CVDD (power), K20 CVDD (power), L7 CVDD (power), L20 CVDD (power), N7 CVDD (power), P20 CVDD (power), T7 CVDD (power), T20 CVDD (power), U7 CVDD (power), U20 CVDD (power), W7 CVDD (power), W20 CVDD (power), Y6 CVDD (power), Y7 CVDD (power), Y8 CVDD (power), Y10 CVDD (power), Y11 CVDD (power), Y14 CVDD (power), Y16 CVDD (power), Y17 CVDD (power), Y19 CVDD (power), Y20 CVDD (power), Y21 CVDD (power)
part J pins: AA5 VSS, AA8 VSS, AA10 VSS, AA11 VSS, AA13 VSS, AA14 VSS, AA16 VSS, AA17 VSS, AA19 VSS, AA22 VSS, AB4 VSS, AB6 VSS, AB9 VSS, AB18 VSS, AB21 VSS, AB23 VSS, AC3 VSS, AC5 VSS, AC22 VSS, AC24 VSS, AD2 VSS, AD4 VSS, AD23 VSS, AD25 VSS, AE3 VSS, AE14 VSS, AE24 VSS, AF8 VSS, AF19 VSS, V5 VSS, V7 VSS, V20 VSS, V22 VSS, W1 VSS, W6 VSS, W21 VSS, W26 VSS, Y9 VSS, Y12 VSS, Y15 VSS, Y18 VSS
part K pins: A8 VSS, A19 VSS, B3 VSS, B13 VSS, B24 VSS, C2 VSS, C4 VSS, C23 VSS, C25 VSS, D3 VSS, D5 VSS, D22 VSS, D24 VSS, E4 VSS, E6 VSS, E9 VSS, E18 VSS, E21 VSS, E23 VSS, F5 VSS, F8 VSS, F10 VSS, F11 VSS, F13 VSS, F14 VSS, F16 VSS, F17 VSS, F19 VSS, F22 VSS, G9 VSS, G12 VSS, G15 VSS, G18 VSS, H1 VSS, H6 VSS, H21 VSS, H26 VSS, J5 VSS, J7 VSS, J20 VSS, J22 VSS, K21 VSS, L6 VSS, L21 VSS, M7 VSS, M20 VSS, N6 VSS, N21 VSS, N25 VSS, P2 VSS, P6 VSS, P21 VSS, R7 VSS, R20 VSS, T6 VSS, T21 VSS, U6 VSS, U21 VSS
part A text: MCU; HPI; PCI
part B text: MCU; EMIFA2
part C text: MCU; EMIFA1
part D text: MCU; EMIFB
part E text: MCU; MBSP1; UTOPIA
part F text: MCU; GPIO; TIMER; MBSP0
part G text: MCU; JTAG; CLK
part H text: MCU
part I text: MCU
part J text: MCU; GND
part K text: MCU; GND

## TP112-7
designator TV?  (value not drawn)
ComponentHeigt: 8; ComponentWeigt: 3.6; Firme: Sumida; Leadform: SMD; NN: 25301001; KIND: Катушка индуктивности CDRH127/LDNP-330M Sumida; ClassName: *; Component Link: *
footprint TP112-7
pins: 1, 4, 9, 10
text: |; ||

## TP115-10
designator TV?  (value not drawn)
ComponentHeigt: 8; ComponentWeigt: 3.6; Firme: Sumida; Leadform: SMD; NN: 25301001; KIND: Катушка индуктивности CDRH127/LDNP-330M Sumida; ClassName: *; Component Link: *
footprint TP115-10
pins: 1, 5, 8, 9, 12, 13
text: ||; |; |||

## TP4056A (SOIC-8)
designator D?  (value not drawn)
ComponentHeigt: 1.8; Firme: Linear; Leadform: формована; Kind: Микросхема; ClassName: *; Component Link: *; Packaging: SOT-223; NN: *
footprint SOIC-8(RD-8-2)
pins: 1 TEMP, 2 PROG, 3 GND, 4 VCC, 5 BAT, 6 ~{STDBY} (out), 7 ~{CHRG} (out), 8 CE, 9 GND
text: *STU

## TPD12S016PWR (TSSOP-24)
designator D?
Leadform: по чертежу; Note: Установка по чертежу; Kind: Микросхема; Component Link: www.honeywell.com/radhard; ClassName: *; NN: *
footprint TSSOP-24
pins: 1 CEC_A (io), 2 SCL_A (io), 3 SDA_A (io), 4 HPD_A (out), 5 LS_OE (in), 6 GND, 7 CEC_B (io), 8 SCL_B (io), 9 SDA_B (io), 10 HPD_B (in), 11 VCC5V (power), 12 CT_HPD (in), 13 5V_OUT (out), 14 GND, 15 CLK- (io), 16 CLK+ (io), 17 D0- (io), 18 D0+ (io), 19 GND, 20 D1- (io), 21 D1+ (io), 22 D2- (io), 23 D2+ (io), 24 VCCA (power)
text: BUF

## TPS2051BDBVR (SOT23-5)
designator D?  (value not drawn)
ComponentHeigt: 1.8; Firme: Linear; Leadform: формована; Kind: Микросхема; ClassName: *; Component Link: *; Packaging: SOT-223; NN: *
footprint SOT-23-5
pins: 1 OUT (power), 2 GND, 3 ~{OC} (out), 4 EN (in), 5 IN (power)
text: *FIL

## TPS3106K33DBVR (SOT23-6)
designator D?  (value not drawn)
ComponentHeigt: 1.8; Firme: Linear; Leadform: формована; Kind: Микросхема; ClassName: *; Component Link: *; Packaging: SOT-223; NN: *
footprint SOT23-6
pins: 1 ~{RSTO} (out), 2 GND, 3 ~{MR} (in), 4 SENS (in), 5 ~{RSTSNS} (in), 6 VDD
text: *WDG

## TPS54310PWP (SSOP-20)
designator D?  (value not drawn)
ComponentHeigt: 1.8; Firme: Linear; Leadform: формована; Kind: Микросхема; ClassName: *; Component Link: *; Packaging: SOT-223; NN: *
footprint SSOP-20 (Power PAD)
pins: 1 AGND, 2 VSNS (in), 3 COMP (out), 4 PG (out), 5 BOOT, 6 PH, 7 PH, 8 PH, 9 PH, 10 PH, 11 PGND, 12 PGND, 13 PGND, 14 VIN (power), 15 VIN (power), 16 VIN (power), 17 VBIAS, 18 SS/EN, 19 SYNC (in), 20 RT, 21 PWPAD
text: *STU

## TPS62007DGSR (VSSOP-10)
designator D?  (value not drawn)
ComponentHeigt: 1.8; Firme: Linear; Leadform: формована; Kind: Микросхема; ClassName: *; Component Link: *; Packaging: SOT-223; NN: *
footprint MSOP-10
pins: 1 VIN (power), 2 FC, 3 GND, 4 PG (out), 5 FB (in), 6 ILIM (in), 7 SYNC (in), 8 EN (in), 9 OUT, 10 PGND
text: *STU

## TPS563201DDC (SOT23-6)
designator D?  (value not drawn)
ComponentHeigt: 1.8; Firme: Linear; Leadform: формована; Kind: Микросхема; ClassName: *; Component Link: *; Packaging: SOT-223; NN: *
footprint SOT23-6
pins: 1 GND, 2 SW (out), 3 VIN (power), 4 VFB (in), 5 EN (in), 6 VBST
text: *STU

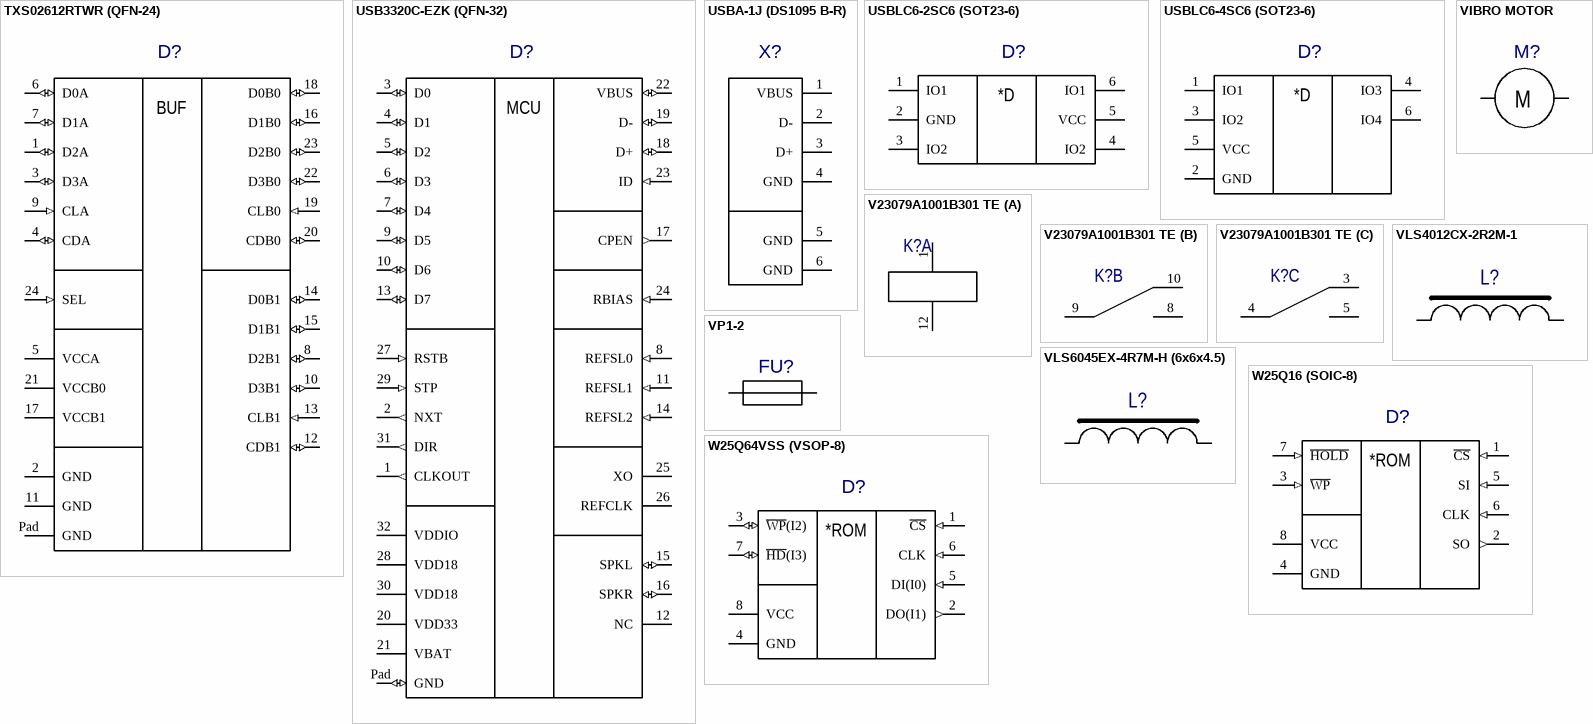
[diagram p15: symbols TXS02612RTWR (QFN-24) to W25Q64VSS (VSOP-8)]

## TXS02612RTWR (QFN-24)
designator D?
Leadform: по чертежу; Note: Установка по чертежу; Kind: Микросхема; Component Link: www.honeywell.com/radhard; ClassName: *; NN: *
footprint QFN-24
pins: 1 D2A (io), 2 GND, 3 D3A (io), 4 CDA (io), 5 VCCA (power), 6 D0A (io), 7 D1A (io), 8 D2B1 (io), 9 CLA (in), 10 D3B1 (io), 11 GND, 12 CDB1 (io), 13 CLB1 (in), 14 D0B1 (io), 15 D1B1 (io), 16 D1B0 (io), 17 VCCB1 (power), 18 D0B0 (io), 19 CLB0 (in), 20 CDB0 (io), 21 VCCB0 (power), 22 D3B0 (io), 23 D2B0 (io), 24 SEL (in), Pad GND
text: BUF

## USB3320C-EZK (QFN-32)
designator D?
Leadform: по чертежу; Note: Установка по чертежу; Kind: Микросхема; Component Link: www.honeywell.com/radhard; ClassName: *; NN: *
footprint QFN-32
pins: 1 CLKOUT (out), 2 NXT (out), 3 D0 (io), 4 D1 (io), 5 D2 (io), 6 D3 (io), 7 D4 (io), 8 REFSL0 (in), 9 D5 (io), 10 D6 (io), 11 REFSL1 (in), 12 NC, 13 D7 (io), 14 REFSL2 (in), 15 SPKL (io), 16 SPKR (io), 17 CPEN (out), 18 D+ (io), 19 D- (io), 20 VDD33 (power), 21 VBAT (power), 22 VBUS (io), 23 ID (in), 24 RBIAS (in), 25 XO, 26 REFCLK, 27 RSTB (in), 28 VDD18 (power), 29 STP (in), 30 VDD18 (power), 31 DIR (out), 32 VDDIO (power), Pad GND (io)
text: MCU

## USBA-1J (DS1095 B-R)
designator X?  (value not drawn)
ComponentHeigt: 5.5; Name: Вилка; Specification: Вилка PLD2-2 *; Typ: PLD2-2; ClassName: *; Component Link: *; ComponentWeigt: *; Firme: *; Leadform: *; NN: *; KIND: *
footprint USBA-1J (DS1095 B-R)
pins: 1 VBUS, 2 D-, 3 D+, 4 GND, 5 GND, 6 GND
1 alternate drawing of the same symbol

## USBLC6-2SC6 (SOT23-6)
designator D?  (value not drawn)
ComponentHeigt: 1.8; Firme: Linear; Leadform: формована; Kind: Микросхема; ClassName: *; Component Link: *; Packaging: SOT-223; NN: *
footprint SOT23-6
pins: 1 IO1, 2 GND, 3 IO2, 4 IO2, 5 VCC, 6 IO1
text: *D

## USBLC6-4SC6 (SOT23-6)
designator D?  (value not drawn)
ComponentHeigt: 1.8; Firme: Linear; Leadform: формована; Kind: Микросхема; ClassName: *; Component Link: *; Packaging: SOT-223; NN: *
footprint SOT23-6
pins: 1 IO1, 2 GND, 3 IO2, 4 IO3, 5 VCC, 6 IO4
text: *D

## V23079A1001B301 TE
designator K?
ComponentHeigt: 5.6; ComponentWeigt: 2; Leadform: SMD; NN: 26100248; KIND: Реле TQ2-SA-12V Panasonic; ClassName: *; Component Link: *; Packaging: SA type
footprint V23079A1001B301
part A pins: 1 +, 12 -
part B pins: 8 sw3, 9 sw1, 10 sw2
part C pins: 3 sw5, 4 sw4, 5 sw6
1 alternate drawing of the same symbol

## VIBRO MOTOR
designator M?  (value not drawn)
ComponentHeigt: 0.6; Firme: Yageo; Leadform: SMD; Kind: Резистор; ClassName: *; ComponentWeigt: *; Component Link: *; Packaging: 0805; NN: *; Value: *
footprint VIBRO MOTOR
pins: 1, 2
text: M

## VLS4012CX-2R2M-1
designator L?, comment 0.37 Ohm  (value not drawn)
Value: {Value}; ComponentHeigt: 3.2; Firm: TDK; Name: Катушка индуктивности; Kind: Катушка индуктивности B82432T TDK; Typ: B82432T; NN: *; Packaging: SIMIT 1812-T
footprint VLS4012CX-2R2M-1
pins: 1, 2

## VLS6045EX-4R7M-H (6x6x4.5)
designator L?, comment 0.37 Ohm  (value not drawn)
Value: {Value}; ComponentHeigt: 3.2; Firm: TDK; Name: Катушка индуктивности; Kind: Катушка индуктивности B82432T TDK; Typ: B82432T; NN: *; Packaging: SIMIT 1812-T
footprint VLS6045EX-4R7M-H
pins: 1, 2

## VP1-2
designator FU?  (value not drawn)
ComponentHeigt: 0.6; Firme: Yageo; Leadform: SMD; Kind: Резистор; ClassName: *; ComponentWeigt: *; Component Link: *; Packaging: 0805; NN: *; Value: *
footprint VP1-2 0.25А 250V
pins: 1, 2

## W25Q16 (SOIC-8)
designator D?  (value not drawn)
ComponentHeigt: 1.8; Firme: Linear; Leadform: формована; Kind: Микросхема; ClassName: *; Component Link: *; Packaging: SOT-223; NN: *
footprint SOIC-8(208-mil)
pins: 1 ~{CS} (in), 2 SO (out), 3 ~{WP} (in), 4 GND, 5 SI (in), 6 CLK (in), 7 ~{HOLD} (in), 8 VCC (power)
text: *ROM

## W25Q64VSS (VSOP-8)
designator D?  (value not drawn)
ComponentHeigt: 1.8; Firme: Linear; Leadform: формована; Kind: Микросхема; ClassName: *; Component Link: *; Packaging: SOT-223; NN: *
footprint VSOP-8
pins: 1 ~{CS} (in), 2 DO(I1) (out), 3 ~{WP}(I2) (io), 4 GND, 5 DI(I0) (in), 6 CLK (in), 7 ~{HD}(I3) (io), 8 VCC (power)
text: *ROM

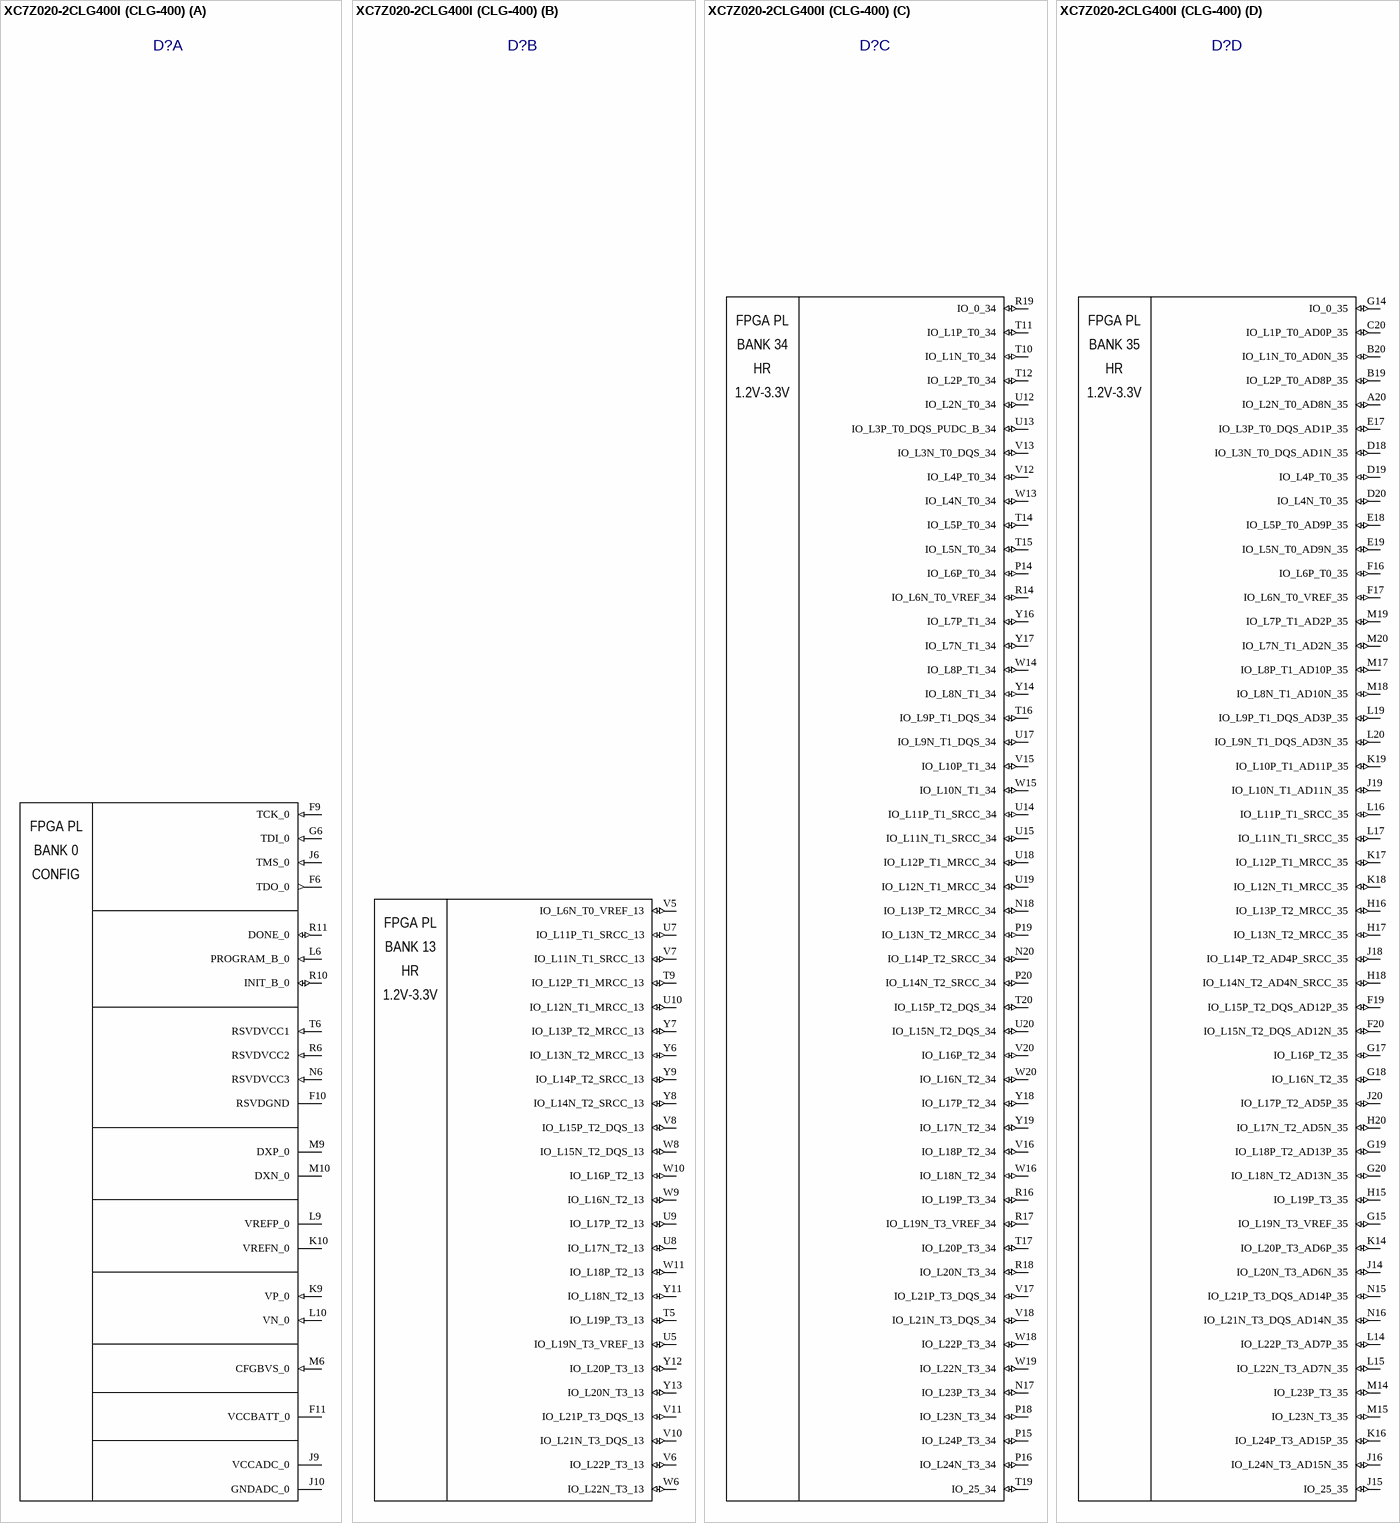
[diagram p16: symbol XC7Z020-2CLG400I (CLG-400)]

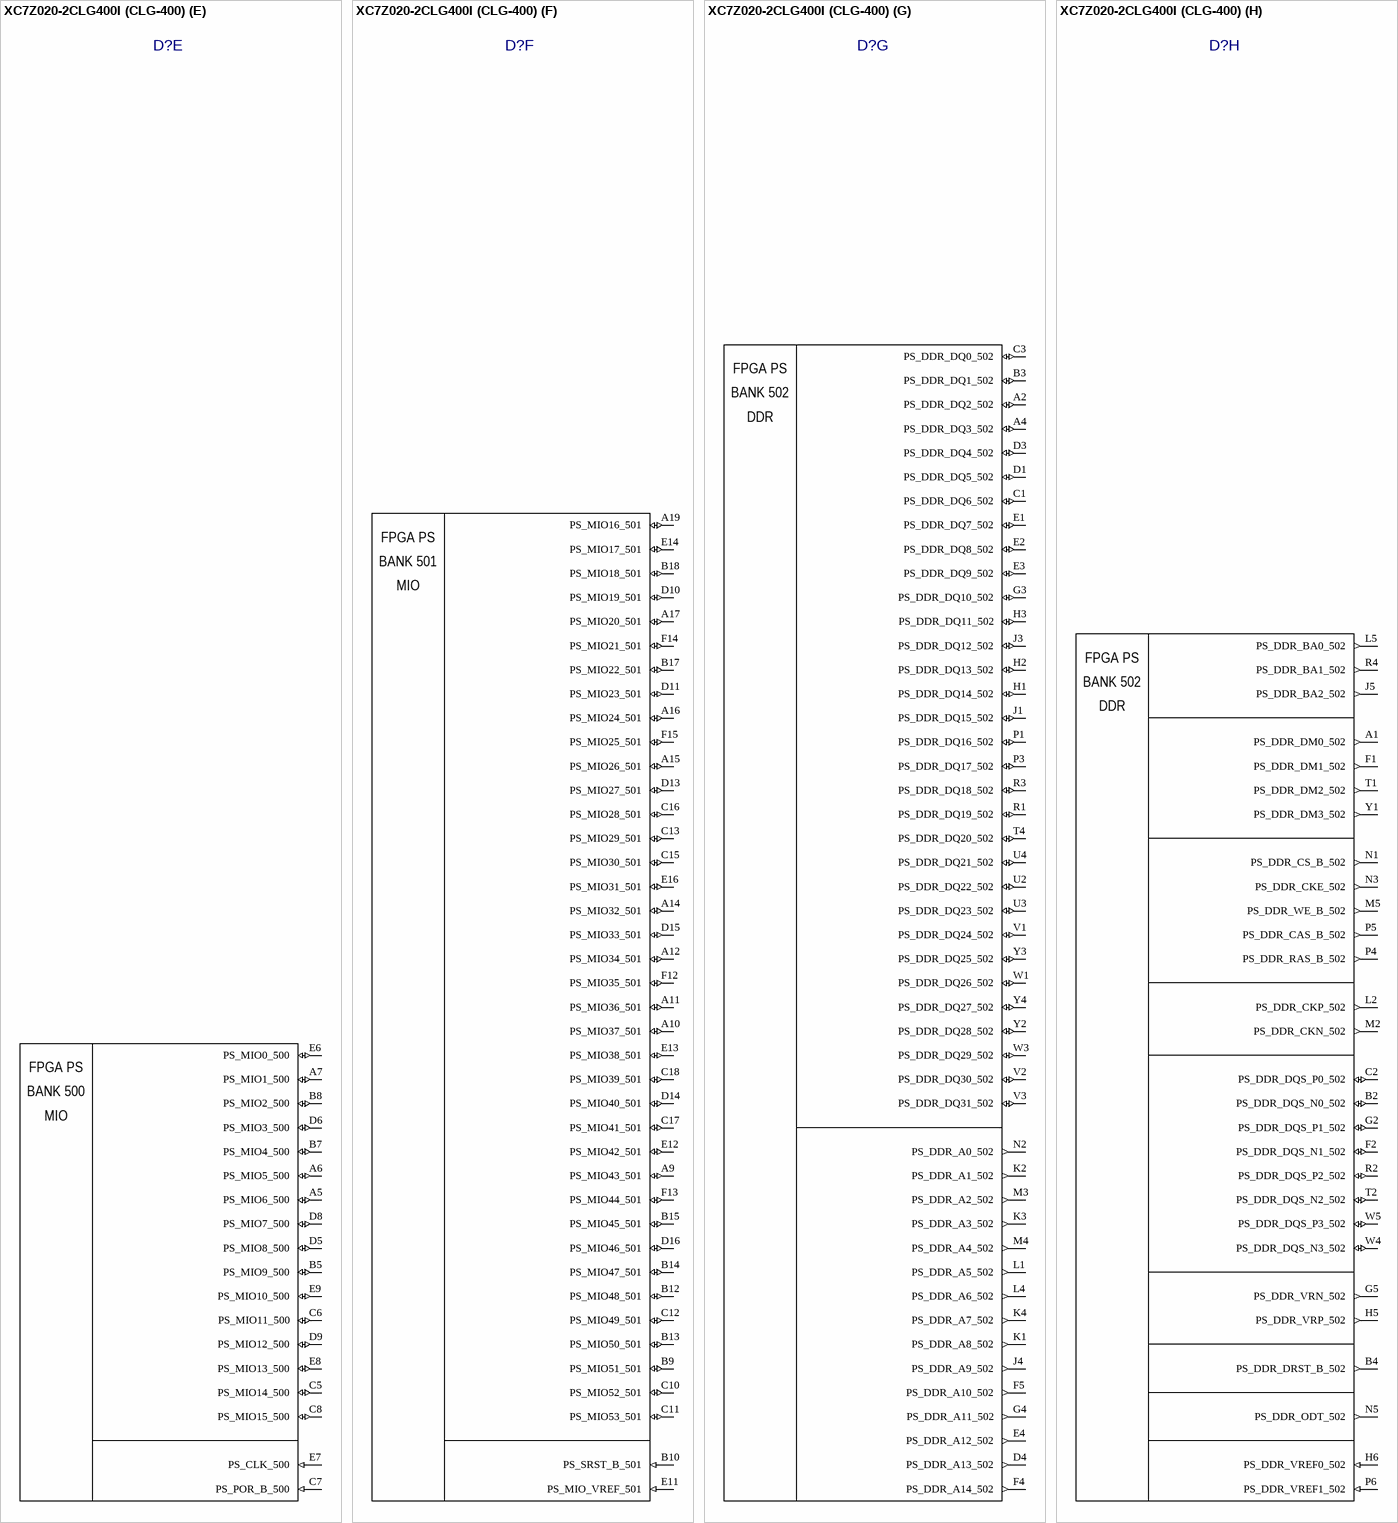
[diagram p17: symbol XC7Z020-2CLG400I (CLG-400)]

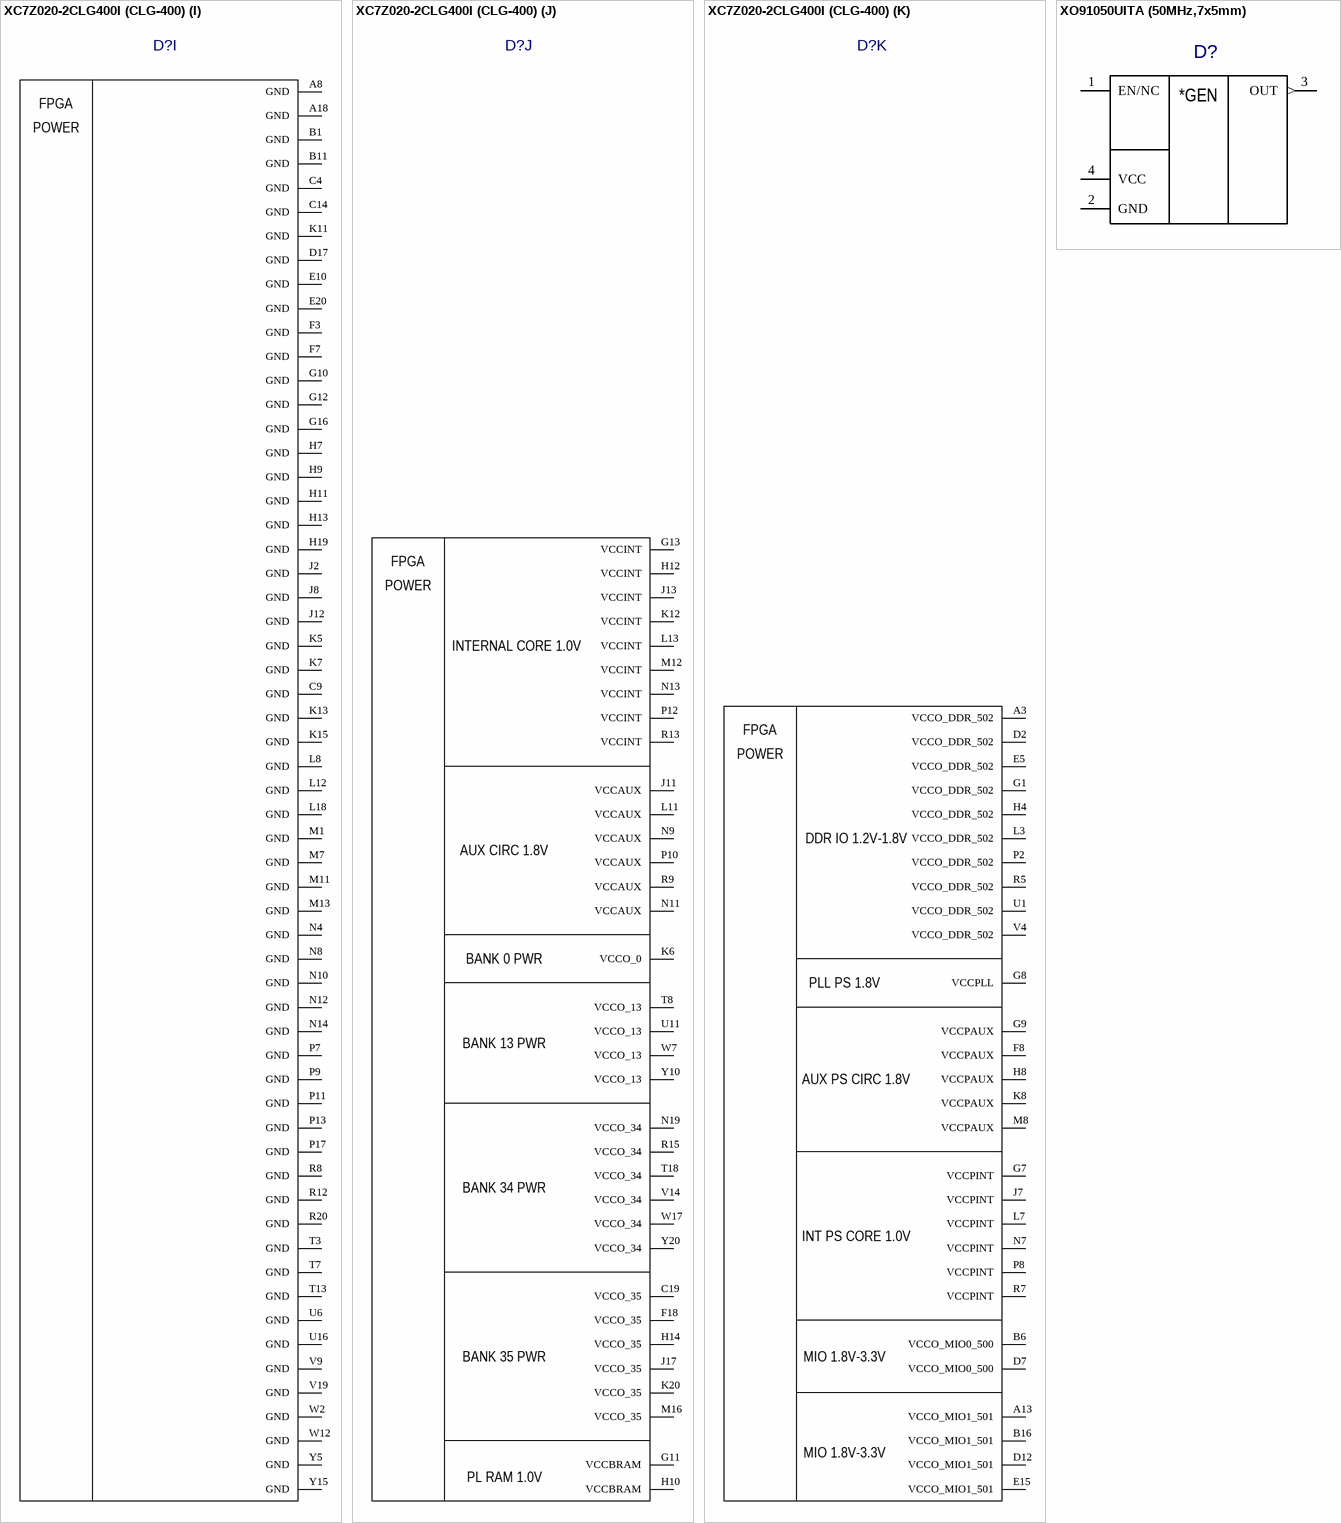
[diagram p18: symbols XC7Z020-2CLG400I (CLG-400) to XO91050UITA (50MHz,7x5mm)]

## XC7Z020-2CLG400I (CLG-400)
designator D?
Leadform: по чертежу; Note: Установка по чертежу; Kind: Микросхема; Component Link: www.honeywell.com/radhard; ClassName: *; NN: *
footprint CLG-400
part A pins: F6 TDO_0 (out), F9 TCK_0 (in), F10 RSVDGND, F11 VCCBATT_0, G6 TDI_0 (in), J6 TMS_0 (in), J9 VCCADC_0 (power), J10 GNDADC_0, K9 VP_0 (in), K10 VREFN_0, L6 PROGRAM_B_0 (in), L9 VREFP_0, L10 VN_0 (in), M6 CFGBVS_0 (in), M9 DXP_0, M10 DXN_0, N6 RSVDVCC3 (in), R6 RSVDVCC2 (in), R10 INIT_B_0 (io), R11 DONE_0 (io), T6 RSVDVCC1 (in)
part B pins: T5 IO_L19P_T3_13 (io), T9 IO_L12P_T1_MRCC_13 (io), U5 IO_L19N_T3_VREF_13 (io), U7 IO_L11P_T1_SRCC_13 (io), U8 IO_L17N_T2_13 (io), U9 IO_L17P_T2_13 (io), U10 IO_L12N_T1_MRCC_13 (io), V5 IO_L6N_T0_VREF_13 (io), V6 IO_L22P_T3_13 (io), V7 IO_L11N_T1_SRCC_13 (io), V8 IO_L15P_T2_DQS_13 (io), V10 IO_L21N_T3_DQS_13 (io), V11 IO_L21P_T3_DQS_13 (io), W6 IO_L22N_T3_13 (io), W8 IO_L15N_T2_DQS_13 (io), W9 IO_L16N_T2_13 (io), W10 IO_L16P_T2_13 (io), W11 IO_L18P_T2_13 (io), Y6 IO_L13N_T2_MRCC_13 (io), Y7 IO_L13P_T2_MRCC_13 (io), Y8 IO_L14N_T2_SRCC_13 (io), Y9 IO_L14P_T2_SRCC_13 (io), Y11 IO_L18N_T2_13 (io), Y12 IO_L20P_T3_13 (io), Y13 IO_L20N_T3_13 (io)
part C pins: N17 IO_L23P_T3_34 (io), N18 IO_L13P_T2_MRCC_34 (io), N20 IO_L14P_T2_SRCC_34 (io), P14 IO_L6P_T0_34 (io), P15 IO_L24P_T3_34 (io), P16 IO_L24N_T3_34 (io), P18 IO_L23N_T3_34 (io), P19 IO_L13N_T2_MRCC_34 (io), P20 IO_L14N_T2_SRCC_34 (io), R14 IO_L6N_T0_VREF_34 (io), R16 IO_L19P_T3_34 (io), R17 IO_L19N_T3_VREF_34 (io), R18 IO_L20N_T3_34 (io), R19 IO_0_34 (io), T10 IO_L1N_T0_34 (io), T11 IO_L1P_T0_34 (io), T12 IO_L2P_T0_34 (io), T14 IO_L5P_T0_34 (io), T15 IO_L5N_T0_34 (io), T16 IO_L9P_T1_DQS_34 (io), T17 IO_L20P_T3_34 (io), T19 IO_25_34 (io), T20 IO_L15P_T2_DQS_34 (io), U12 IO_L2N_T0_34 (io), U13 IO_L3P_T0_DQS_PUDC_B_34 (io), U14 IO_L11P_T1_SRCC_34 (io), U15 IO_L11N_T1_SRCC_34 (io), U17 IO_L9N_T1_DQS_34 (io), U18 IO_L12P_T1_MRCC_34 (io), U19 IO_L12N_T1_MRCC_34 (io), U20 IO_L15N_T2_DQS_34 (io), V12 IO_L4P_T0_34 (io), V13 IO_L3N_T0_DQS_34 (io), V15 IO_L10P_T1_34 (io), V16 IO_L18P_T2_34 (io), V17 IO_L21P_T3_DQS_34 (io), V18 IO_L21N_T3_DQS_34 (io), V20 IO_L16P_T2_34 (io), W13 IO_L4N_T0_34 (io), W14 IO_L8P_T1_34 (io), W15 IO_L10N_T1_34 (io), W16 IO_L18N_T2_34 (io), W18 IO_L22P_T3_34 (io), W19 IO_L22N_T3_34 (io), W20 IO_L16N_T2_34 (io), Y14 IO_L8N_T1_34 (io), Y16 IO_L7P_T1_34 (io), Y17 IO_L7N_T1_34 (io), Y18 IO_L17P_T2_34 (io), Y19 IO_L17N_T2_34 (io)
part D pins: A20 IO_L2N_T0_AD8N_35 (io), B19 IO_L2P_T0_AD8P_35 (io), B20 IO_L1N_T0_AD0N_35 (io), C20 IO_L1P_T0_AD0P_35 (io), D18 IO_L3N_T0_DQS_AD1N_35 (io), D19 IO_L4P_T0_35 (io), D20 IO_L4N_T0_35 (io), E17 IO_L3P_T0_DQS_AD1P_35 (io), E18 IO_L5P_T0_AD9P_35 (io), E19 IO_L5N_T0_AD9N_35 (io), F16 IO_L6P_T0_35 (io), F17 IO_L6N_T0_VREF_35 (io), F19 IO_L15P_T2_DQS_AD12P_35 (io), F20 IO_L15N_T2_DQS_AD12N_35 (io), G14 IO_0_35 (io), G15 IO_L19N_T3_VREF_35 (io), G17 IO_L16P_T2_35 (io), G18 IO_L16N_T2_35 (io), G19 IO_L18P_T2_AD13P_35 (io), G20 IO_L18N_T2_AD13N_35 (io), H15 IO_L19P_T3_35 (io), H16 IO_L13P_T2_MRCC_35 (io), H17 IO_L13N_T2_MRCC_35 (io), H18 IO_L14N_T2_AD4N_SRCC_35 (io), H20 IO_L17N_T2_AD5N_35 (io), J14 IO_L20N_T3_AD6N_35 (io), J15 IO_25_35 (io), J16 IO_L24N_T3_AD15N_35 (io), J18 IO_L14P_T2_AD4P_SRCC_35 (io), J19 IO_L10N_T1_AD11N_35 (io), J20 IO_L17P_T2_AD5P_35 (io), K14 IO_L20P_T3_AD6P_35 (io), K16 IO_L24P_T3_AD15P_35 (io), K17 IO_L12P_T1_MRCC_35 (io), K18 IO_L12N_T1_MRCC_35 (io), K19 IO_L10P_T1_AD11P_35 (io), L14 IO_L22P_T3_AD7P_35 (io), L15 IO_L22N_T3_AD7N_35 (io), L16 IO_L11P_T1_SRCC_35 (io), L17 IO_L11N_T1_SRCC_35 (io), L19 IO_L9P_T1_DQS_AD3P_35 (io), L20 IO_L9N_T1_DQS_AD3N_35 (io), M14 IO_L23P_T3_35 (io), M15 IO_L23N_T3_35 (io), M17 IO_L8P_T1_AD10P_35 (io), M18 IO_L8N_T1_AD10N_35 (io), M19 IO_L7P_T1_AD2P_35 (io), M20 IO_L7N_T1_AD2N_35 (io), N15 IO_L21P_T3_DQS_AD14P_35 (io), N16 IO_L21N_T3_DQS_AD14N_35 (io)
part E pins: A5 PS_MIO6_500 (io), A6 PS_MIO5_500 (io), A7 PS_MIO1_500 (io), B5 PS_MIO9_500 (io), B7 PS_MIO4_500 (io), B8 PS_MIO2_500 (io), C5 PS_MIO14_500 (io), C6 PS_MIO11_500 (io), C7 PS_POR_B_500 (in), C8 PS_MIO15_500 (io), D5 PS_MIO8_500 (io), D6 PS_MIO3_500 (io), D8 PS_MIO7_500 (io), D9 PS_MIO12_500 (io), E6 PS_MIO0_500 (io), E7 PS_CLK_500 (in), E8 PS_MIO13_500 (io), E9 PS_MIO10_500 (io)
part F pins: A9 PS_MIO43_501 (io), A10 PS_MIO37_501 (io), A11 PS_MIO36_501 (io), A12 PS_MIO34_501 (io), A14 PS_MIO32_501 (io), A15 PS_MIO26_501 (io), A16 PS_MIO24_501 (io), A17 PS_MIO20_501 (io), A19 PS_MIO16_501 (io), B9 PS_MIO51_501 (io), B10 PS_SRST_B_501 (in), B12 PS_MIO48_501 (io), B13 PS_MIO50_501 (io), B14 PS_MIO47_501 (io), B15 PS_MIO45_501 (io), B17 PS_MIO22_501 (io), B18 PS_MIO18_501 (io), C10 PS_MIO52_501 (io), C11 PS_MIO53_501 (io), C12 PS_MIO49_501 (io), C13 PS_MIO29_501 (io), C15 PS_MIO30_501 (io), C16 PS_MIO28_501 (io), C17 PS_MIO41_501 (io), C18 PS_MIO39_501 (io), D10 PS_MIO19_501 (io), D11 PS_MIO23_501 (io), D13 PS_MIO27_501 (io), D14 PS_MIO40_501 (io), D15 PS_MIO33_501 (io), D16 PS_MIO46_501 (io), E11 PS_MIO_VREF_501 (in), E12 PS_MIO42_501 (io), E13 PS_MIO38_501 (io), E14 PS_MIO17_501 (io), E16 PS_MIO31_501 (io), F12 PS_MIO35_501 (io), F13 PS_MIO44_501 (io), F14 PS_MIO21_501 (io), F15 PS_MIO25_501 (io)
part G pins: A2 PS_DDR_DQ2_502 (io), A4 PS_DDR_DQ3_502 (io), B3 PS_DDR_DQ1_502 (io), C1 PS_DDR_DQ6_502 (io), C3 PS_DDR_DQ0_502 (io), D1 PS_DDR_DQ5_502 (io), D3 PS_DDR_DQ4_502 (io), D4 PS_DDR_A13_502 (out), E1 PS_DDR_DQ7_502 (io), E2 PS_DDR_DQ8_502 (io), E3 PS_DDR_DQ9_502 (io), E4 PS_DDR_A12_502 (out), F4 PS_DDR_A14_502 (out), F5 PS_DDR_A10_502 (out), G3 PS_DDR_DQ10_502 (io), G4 PS_DDR_A11_502 (out), H1 PS_DDR_DQ14_502 (io), H2 PS_DDR_DQ13_502 (io), H3 PS_DDR_DQ11_502 (io), J1 PS_DDR_DQ15_502 (io), J3 PS_DDR_DQ12_502 (io), J4 PS_DDR_A9_502 (out), K1 PS_DDR_A8_502 (out), K2 PS_DDR_A1_502 (out), K3 PS_DDR_A3_502 (out), K4 PS_DDR_A7_502 (out), L1 PS_DDR_A5_502 (out), L4 PS_DDR_A6_502 (out), M3 PS_DDR_A2_502 (out), M4 PS_DDR_A4_502 (out), N2 PS_DDR_A0_502 (out), P1 PS_DDR_DQ16_502 (io), P3 PS_DDR_DQ17_502 (io), R1 PS_DDR_DQ19_502 (io), R3 PS_DDR_DQ18_502 (io), T4 PS_DDR_DQ20_502 (io), U2 PS_DDR_DQ22_502 (io), U3 PS_DDR_DQ23_502 (io), U4 PS_DDR_DQ21_502 (io), V1 PS_DDR_DQ24_502 (io), V2 PS_DDR_DQ30_502 (io), V3 PS_DDR_DQ31_502 (io), W1 PS_DDR_DQ26_502 (io), W3 PS_DDR_DQ29_502 (io), Y2 PS_DDR_DQ28_502 (io), Y3 PS_DDR_DQ25_502 (io), Y4 PS_DDR_DQ27_502 (io)
part H pins: A1 PS_DDR_DM0_502 (out), B2 PS_DDR_DQS_N0_502 (io), B4 PS_DDR_DRST_B_502 (out), C2 PS_DDR_DQS_P0_502 (io), F1 PS_DDR_DM1_502 (out), F2 PS_DDR_DQS_N1_502 (io), G2 PS_DDR_DQS_P1_502 (io), G5 PS_DDR_VRN_502 (out), H5 PS_DDR_VRP_502 (out), H6 PS_DDR_VREF0_502 (in), J5 PS_DDR_BA2_502 (out), L2 PS_DDR_CKP_502 (out), L5 PS_DDR_BA0_502 (out), M2 PS_DDR_CKN_502 (out), M5 PS_DDR_WE_B_502 (out), N1 PS_DDR_CS_B_502 (out), N3 PS_DDR_CKE_502 (out), N5 PS_DDR_ODT_502 (out), P4 PS_DDR_RAS_B_502 (out), P5 PS_DDR_CAS_B_502 (out), P6 PS_DDR_VREF1_502 (in), R2 PS_DDR_DQS_P2_502 (io), R4 PS_DDR_BA1_502 (out), T1 PS_DDR_DM2_502 (out), T2 PS_DDR_DQS_N2_502 (io), W4 PS_DDR_DQS_N3_502 (io), W5 PS_DDR_DQS_P3_502 (io), Y1 PS_DDR_DM3_502 (out)
part I pins: A8 GND, A18 GND, B1 GND, B11 GND, C4 GND, C9 GND, C14 GND, D17 GND, E10 GND, E20 GND, F3 GND, F7 GND, G10 GND, G12 GND, G16 GND, H7 GND, H9 GND, H11 GND, H13 GND, H19 GND, J2 GND, J8 GND, J12 GND, K5 GND, K7 GND, K11 GND, K13 GND, K15 GND, L8 GND, L12 GND, L18 GND, M1 GND, M7 GND, M11 GND, M13 GND, N4 GND, N8 GND, N10 GND, N12 GND, N14 GND, P7 GND, P9 GND, P11 GND, P13 GND, P17 GND, R8 GND, R12 GND, R20 GND, T3 GND, T7 GND, T13 GND, U6 GND, U16 GND, V9 GND, V19 GND, W2 GND, W12 GND, Y5 GND, Y15 GND
part J pins: C19 VCCO_35 (power), F18 VCCO_35 (power), G11 VCCBRAM (power), G13 VCCINT (power), H10 VCCBRAM (power), H12 VCCINT (power), H14 VCCO_35 (power), J11 VCCAUX (power), J13 VCCINT (power), J17 VCCO_35 (power), K6 VCCO_0 (power), K12 VCCINT (power), K20 VCCO_35 (power), L11 VCCAUX (power), L13 VCCINT (power), M12 VCCINT (power), M16 VCCO_35 (power), N9 VCCAUX (power), N11 VCCAUX (power), N13 VCCINT (power), N19 VCCO_34 (power), P10 VCCAUX (power), P12 VCCINT (power), R9 VCCAUX (power), R13 VCCINT (power), R15 VCCO_34 (power), T8 VCCO_13 (power), T18 VCCO_34 (power), U11 VCCO_13 (power), V14 VCCO_34 (power), W7 VCCO_13 (power), W17 VCCO_34 (power), Y10 VCCO_13 (power), Y20 VCCO_34 (power)
part K pins: A3 VCCO_DDR_502 (power), A13 VCCO_MIO1_501 (power), B6 VCCO_MIO0_500 (power), B16 VCCO_MIO1_501 (power), D2 VCCO_DDR_502 (power), D7 VCCO_MIO0_500 (power), D12 VCCO_MIO1_501 (power), E5 VCCO_DDR_502 (power), E15 VCCO_MIO1_501 (power), F8 VCCPAUX (power), G1 VCCO_DDR_502 (power), G7 VCCPINT (power), G8 VCCPLL (power), G9 VCCPAUX (power), H4 VCCO_DDR_502 (power), H8 VCCPAUX (power), J7 VCCPINT (power), K8 VCCPAUX (power), L3 VCCO_DDR_502 (power), L7 VCCPINT (power), M8 VCCPAUX (power), N7 VCCPINT (power), P2 VCCO_DDR_502 (power), P8 VCCPINT (power), R5 VCCO_DDR_502 (power), R7 VCCPINT (power), U1 VCCO_DDR_502 (power), V4 VCCO_DDR_502 (power)
part A text: FPGA PL; BANK 0; CONFIG
part B text: FPGA PL; BANK 13; HR; 1.2V-3.3V
part C text: FPGA PL; BANK 34; HR; 1.2V-3.3V
part D text: FPGA PL; BANK 35; HR; 1.2V-3.3V
part E text: FPGA PS; BANK 500; MIO
part F text: FPGA PS; BANK 501; MIO
part G text: FPGA PS; BANK 502; DDR
part H text: FPGA PS; BANK 502; DDR
part I text: FPGA; POWER
part J text: FPGA; POWER; INTERNAL CORE 1.0V; AUX CIRC 1.8V; BANK 0 PWR; BANK 13 PWR; BANK 34 PWR; BANK 35 PWR; PL RAM 1.0V
part K text: FPGA; POWER; DDR IO 1.2V-1.8V; PLL PS 1.8V; AUX PS CIRC 1.8V; INT PS CORE 1.0V; MIO 1.8V-3.3V

## XO91050UITA (50MHz,7x5mm)
designator D?  (value not drawn)
ComponentHeigt: 1.8; Firme: Linear; Leadform: формована; Kind: Микросхема; ClassName: *; Component Link: *; Packaging: SOT-223; NN: *
footprint XO91050UITA (7x5mm) (HC-49SM)
pins: 1 EN/NC, 2 GND, 3 OUT (out), 4 VCC (power)
text: *GEN